# Altium schematic symbol library MicroController.SchLib: 67 symbols (part 1 of 4)
Pins are listed as number, name and electrical type; pins without a type are passive.

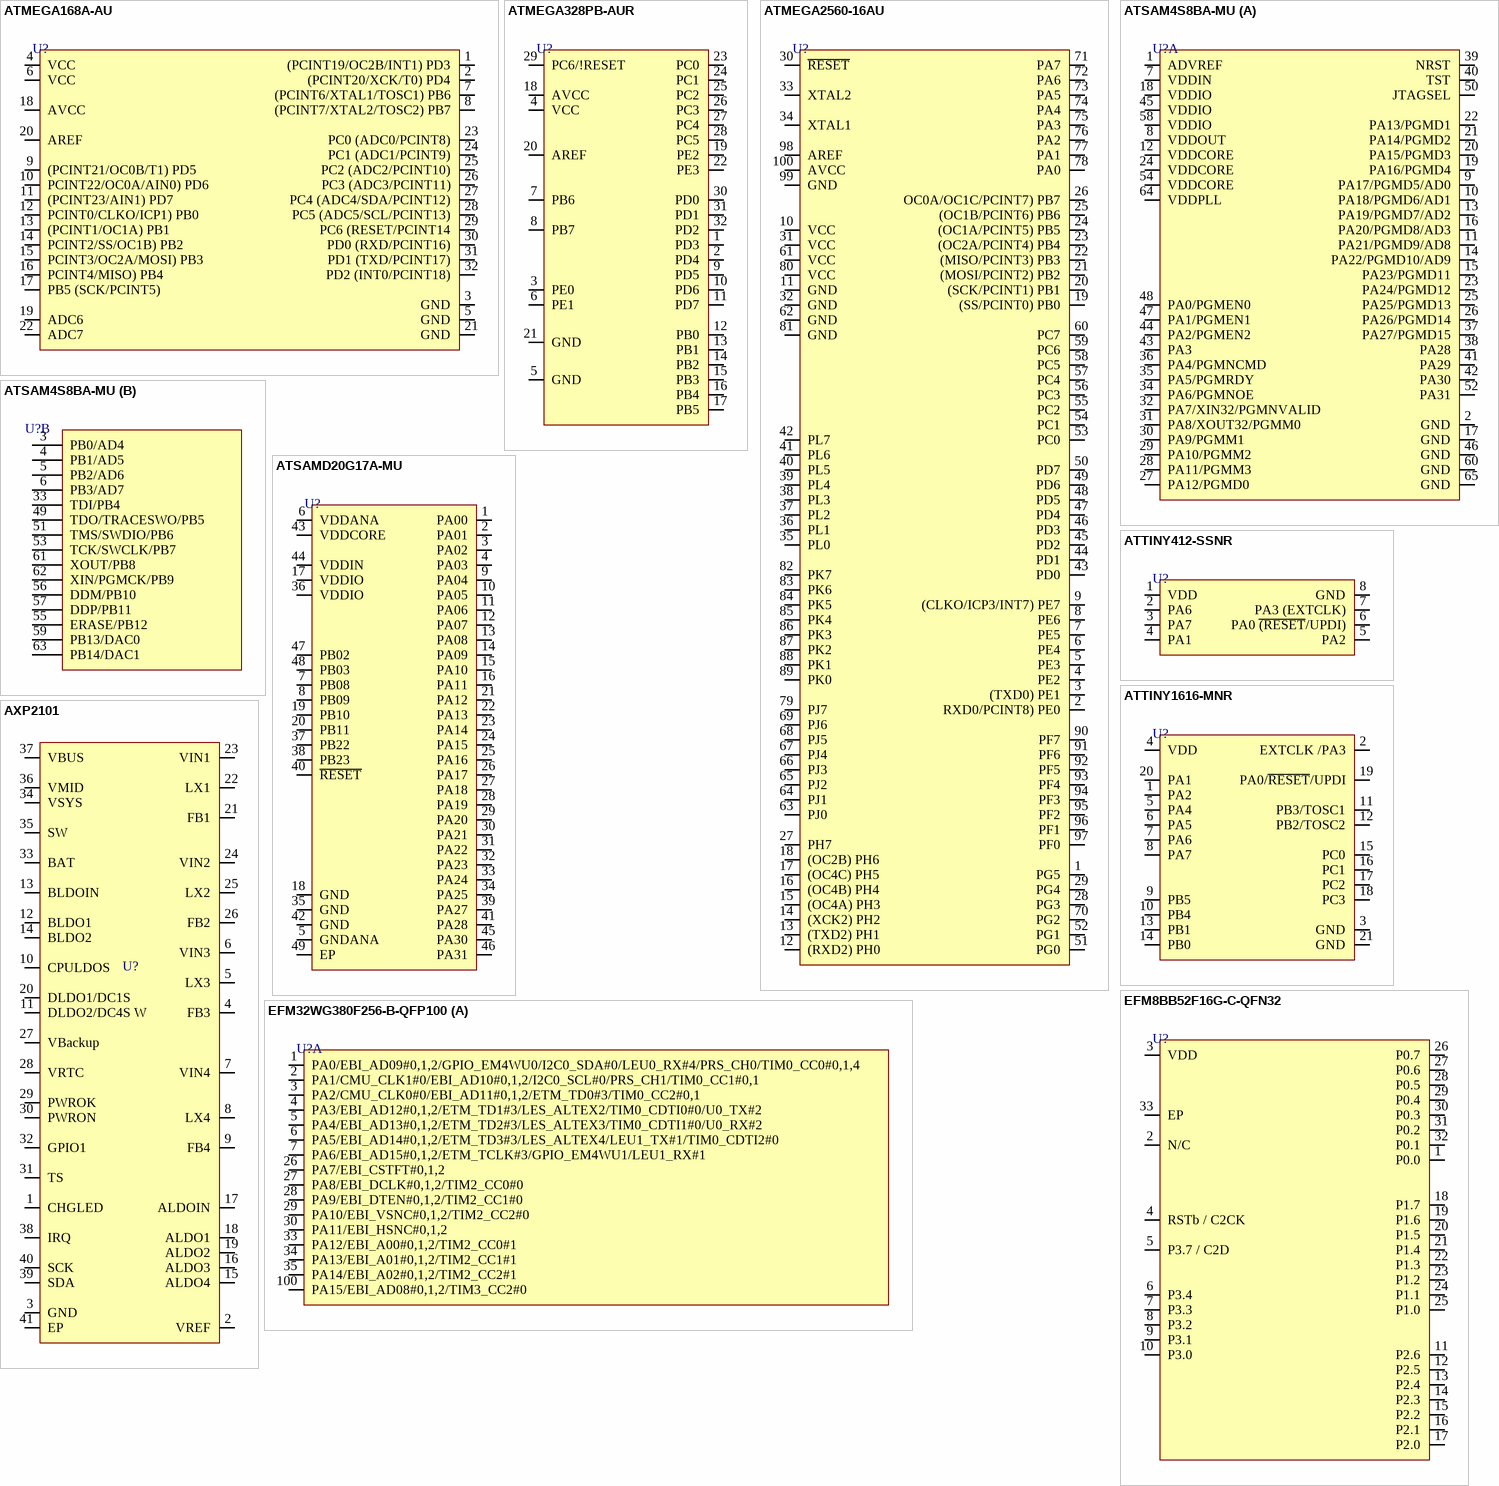
[diagram p0: symbols ATMEGA168A-AU to EFM32WG380F256-B-QFP100]

## ATMEGA168A-AU
designator U?
IC MCU 8BIT 16KB FLASH 32TQFP; Manufacturer: Microchip Tech; Manufacturer Part Number: ATMEGA168A-AU; Package: TQFP-32(7x7); LCSC Part Number: C1522091; Item Type: IC; ComponentLink1URL: https://www.lcsc.com/product-detail/Microcontroller-Units-MCUs-MPUs-SOCs_Microchip-Tech-ATMEGA168A-AU_C1522091.html; ComponentLink1Description: LCSC
footprint 32 TQFP (7x7)
pins: 1 (PCINT19/OC2B/INT1) PD3, 2 (PCINT20/XCK/T0) PD4, 3 GND, 4 VCC, 5 GND, 6 VCC, 7 (PCINT6/XTAL1/TOSC1) PB6, 8 (PCINT7/XTAL2/TOSC2) PB7, 9 (PCINT21/OC0B/T1) PD5, 10 PCINT22/OC0A/AIN0) PD6, 11 (PCINT23/AIN1) PD7, 12 PCINT0/CLKO/ICP1) PB0, 13 (PCINT1/OC1A) PB1, 14 PCINT2/SS/OC1B) PB2, 15 PCINT3/OC2A/MOSI) PB3, 16 PCINT4/MISO) PB4, 17 PB5 (SCK/PCINT5), 18 AVCC, 19 ADC6, 20 AREF, 21 GND, 22 ADC7, 23 PC0 (ADC0/PCINT8), 24 PC1 (ADC1/PCINT9), 25 PC2 (ADC2/PCINT10), 26 PC3 (ADC3/PCINT11), 27 PC4 (ADC4/SDA/PCINT12), 28 PC5 (ADC5/SCL/PCINT13), 29 PC6 (RESET/PCINT14, 30 PD0 (RXD/PCINT16), 31 PD1 (TXD/PCINT17), 32 PD2 (INT0/PCINT18)

## ATMEGA328PB-AUR
designator U?
IC MCU 8BIT 32KB FLASH 32TQFP; Manufacturer: Microchip; Manufacturer Part Number: ATMEGA328PB-AUR; Number of A/D Converters: 1NUMBER; Number of ADC Channels: 8NUMBER; Number of I2C Channels: 2NUMBER; Number of PWM Channels: 10NUMBER; Supplier: Digikey; Supplier Part Number: ATMEGA328PB-AURCT-ND; RoHS: No; Category: Microcontrollers; Stock: 17600; Pricing: 1=1.7, 25=1.56, 100=1.41 (USD); Number of SPI Channels: 2NUMBER; Number of UART Channels: 2NUMBER; Height: 1.2mm; ComponentLink1URL: http://www.atmel.com/images/atmel-42397-8-bit-avr-microcontroller-atmega328pb_summary.pdf?src-supplier=Avnet; ComponentLink1Description: http://www.atmel.com/images/atmel-42397-8-bit-avr-microcontroller-atmega328pb_summary.pdf?src-supplier=Avnet; ComponentLink2URL: http://www.microchip.com/mymicrochip/filehandler.aspx?ddocname=en589666&src-supplier=Digikey; ComponentLink2Description: http://www.microchip.com/mymicrochip/filehandler.aspx?ddocname=en589666&src-supplier=Digikey; ComponentLink3URL: https://datasheet.octopart.com/ATMEGA328PB-AUR-Microchip-datasheet-154741725.pdf?src-supplier=Electro+Sonic; ComponentLink3Description: https://datasheet.octopart.com/ATMEGA328PB-AUR-Microchip-datasheet-154741725.pdf?src-supplier=Electro+Sonic; ComponentLink4URL: https://datasheet.octopart.com/ATMEGA328PB-AUR-Microchip-datasheet-136376163.pdf?src-supplier=SHENGYU+ELECTRONICS; ComponentLink4Description: https://datasheet.octopart.com/ATMEGA328PB-AUR-Microchip-datasheet-136376163.pdf?src-supplier=SHENGYU+ELECTRONICS
footprint 32 TQFP (7x7)
pins: 1 PD3, 2 PD4, 3 PE0, 4 VCC, 5 GND, 6 PE1, 7 PB6, 8 PB7, 9 PD5, 10 PD6, 11 PD7, 12 PB0, 13 PB1, 14 PB2, 15 PB3, 16 PB4, 17 PB5, 18 AVCC, 19 PE2, 20 AREF, 21 GND, 22 PE3, 23 PC0, 24 PC1, 25 PC2, 26 PC3, 27 PC4, 28 PC5, 29 PC6/!RESET, 30 PD0, 31 PD1, 32 PD2

## ATMEGA2560-16AU
designator U?
IC MCU 8BIT 256KB FLASH 100TQFP; Manufacturer: Microchip; Manufacturer Part Number: ATMEGA2560-16AU; Number of Terminals/Pins: 100; Package Body Material: Plastic; Core Architecture: AVR; Frequency: 16MHz; Interface: I2C,SPI,UART,USART,EBI/EMI,2-Wire; Number of I/Os: 86; Oscillator Type: Internal; Data Bus Width: 8b; Peripherals: PWM,Brown-out Detect/Reset,POR,WDT; Min Supply Voltage: 4.5V; Max Supply Voltage: 5.5V; Number of PWM Channels: 12; Operating Supply Voltage: 5V; RAM Size: 8KB; Number of Timers/Counters: 6; Number of ADC Channels: 16; Number of SPI Channels: 1; Watchdog Timer: Yes; Access Time: 16us; Time @ Peak Reflow Temperature-Max (s): 40s; Supplier 1: Avnet; RoHS: Yes; Category: Uncategorized; Stock 1: 4; Pricing 1: 1=12.70000 (USD); Mount: Surface Mount; Case/Package: A; Number of Pins: 100; Package Code: TFQFP; Package Shape: Square; Terminal Finish: Tin; Min Operating Temperature: -40°C; Max Operating Temperature: 85°C; Series: AVR® ATmega; Package Quantity: 90; Packaging: Tray; Memory Size: 256KB; Memory Type: FLASH; Density: 256KB; Number of Programmable I/O: 86; Max Frequency: 16MHz; Number of I2C Channels: 1; Termination: SMD/SMT; Terminal Form: Gull Wing; JESD-30 Code: S-PQFP-G100; Surface Mount: Yes; Terminal Position: QUAD; Number of I/O Lines: 86; Moisture Sensitivity Level: 3; Technology: CMOS; Peak Reflow Temperature (Cel): 260°C; Length: 14.1mm; Width: 14.1mm; Height: 1.05mm; Radiation Hardening: No; Reach SVHC Compliant: Yes; Lead Free: Lead Free; RoHS Compliant: Yes; Temperature Grade: INDUSTRIAL; ComponentLink1URL: https://datasheet.ciiva.com/22651/1698622-22651116.pdf?src-supplier=Farnell; ComponentLink1Description: https://datasheet.ciiva.com/22651/1698622-22651116.pdf?src-supplier=Farnell; ComponentLink2URL: https://datasheet.ciiva.com/15122/getdatasheetpartid-134542-15122545.pdf?src-supplier=Verical; ComponentLink2Description: https://datasheet.ciiva.com/15122/getdatasheetpartid-134542-15122545.pdf?src-supplier=Verical; ComponentLink3URL: https://datasheet.ciiva.com/29119/154804-da-01-en-atmega2560-16au-tqfp-100-29119580.pdf?src-supplier=Conrad; ComponentLink3Description: https://datasheet.ciiva.com/29119/154804-da-01-en-atmega2560-16au-tqfp-100-29119580.pdf?src-supplier=Conrad; ComponentLink4URL: https://datasheet.ciiva.com/6640/atmel-2549-8-bit-avr-microcontroller-atmega640-1280-1281-2560-2561-summary-6640293.pdf?src-supplier=Digi-Key; ComponentLink4Description: https://datasheet.ciiva.com/6640/atmel-2549-8-bit-avr-microcontroller-atmega640-1280-1281-2560-2561-summary-6640293.pdf?src-supplier=Digi-Key; ComponentLink5URL: https://datasheet.ciiva.com/1162/33246-1162139.pdf?src-supplier=Farnell; ComponentLink5Description: https://datasheet.ciiva.com/1162/33246-1162139.pdf?src-supplier=Farnell; ComponentLink6URL: https://datasheet.ciiva.com/1157/1817551-1157521.pdf?src-supplier=Element14; ComponentLink6Description: https://datasheet.ciiva.com/1157/1817551-1157521.pdf?src-supplier=Element14; ComponentLink7URL: https://datasheet.ciiva.com/16936/70123980-16936268.pdf?src-supplier=Allied+Electronics; ComponentLink7Description: https://datasheet.ciiva.com/16936/70123980-16936268.pdf?src-supplier=Allied+Electronics; Supplier Part Number 1: 68T2776; LCSC Part Number: C22460; Item Type: IC
footprint TQFP-100(14x14)
pins: 1 PG5, 2 RXD0/PCINT8) PE0, 3 (TXD0) PE1, 4 PE2, 5 PE3, 6 PE4, 7 PE5, 8 PE6, 9 (CLKO/ICP3/INT7) PE7, 10 VCC, 11 GND, 12 (RXD2) PH0, 13 (TXD2) PH1, 14 (XCK2) PH2, 15 (OC4A) PH3, 16 (OC4B) PH4, 17 (OC4C) PH5, 18 (OC2B) PH6, 19 (SS/PCINT0) PB0, 20 (SCK/PCINT1) PB1, 21 (MOSI/PCINT2) PB2, 22 (MISO/PCINT3) PB3, 23 (OC2A/PCINT4) PB4, 24 (OC1A/PCINT5) PB5, 25 (OC1B/PCINT6) PB6, 26 OC0A/OC1C/PCINT7) PB7, 27 PH7, 28 PG3, 29 PG4, 30 ~{RESET}, 31 VCC, 32 GND, 33 XTAL2, 34 XTAL1, 35 PL0, 36 PL1, 37 PL2, 38 PL3, 39 PL4, 40 PL5, 41 PL6, 42 PL7, 43 PD0, 44 PD1, 45 PD2, 46 PD3, 47 PD4, 48 PD5, 49 PD6, 50 PD7, 51 PG0, 52 PG1, 53 PC0, 54 PC1, 55 PC2, 56 PC3, 57 PC4, 58 PC5, 59 PC6, 60 PC7, 61 VCC, 62 GND, 63 PJ0, 64 PJ1, 65 PJ2, 66 PJ3, 67 PJ4, 68 PJ5, 69 PJ6, 70 PG2, 71 PA7, 72 PA6, 73 PA5, 74 PA4, 75 PA3, 76 PA2, 77 PA1, 78 PA0, 79 PJ7, 80 VCC, 81 GND, 82 PK7, 83 PK6, 84 PK5, 85 PK4, 86 PK3, 87 PK2, 88 PK1, 89 PK0, 90 PF7, 91 PF6, 92 PF5, 93 PF4, 94 PF3, 95 PF2, 96 PF1, 97 PF0, 98 AREF, 99 GND, 100 AVCC

## ATSAM4S8BA-MU
designator U?
IC MCU 32BIT 512KB FLASH 64QFN; Manufacturer: Microchip; Manufacturer Part Number: ATSAM4S8BA-MU; Interface: I2C,SPI,USB,IrDA,UART,USART; Peripherals: Brown-out Detect/Reset,POR,PWM,WDT,DMA; Core Architecture: ARM; Frequency: 120MHz; Oscillator Type: Internal; Number of I/Os: 47; Supplier 1: Digi-Key; RoHS: Yes; Category: Microcontrollers; Pricing 1: 1=6.23000, 25=5.66960, 100=5.13000 (USD); Case/Package: QFN; Min Operating Temperature: -40°C; Max Operating Temperature: 85°C; Memory Type: FLASH; Packaging: Tray; Memory Size: 512KB; RoHS Compliant: Yes; ComponentLink1URL: http://www.microchip.com/mymicrochip/filehandler.aspx?ddocname=en590343&src-supplier=Digi-Key; ComponentLink1Description: http://www.microchip.com/mymicrochip/filehandler.aspx?ddocname=en590343&src-supplier=Digi-Key; Supplier Part Number 1: ATSAM4S8BA-MU-ND; LCSC Part Number: C1337875; Item Type: IC
footprint QFN-64-EP(9x9)
part A pins: 1 ADVREF, 2 GND, 7 VDDIN, 8 VDDOUT, 9 PA17/PGMD5/AD0, 10 PA18/PGMD6/AD1, 11 PA21/PGMD9/AD8, 12 VDDCORE, 13 PA19/PGMD7/AD2, 14 PA22/PGMD10/AD9, 15 PA23/PGMD11, 16 PA20/PGMD8/AD3, 17 GND, 18 VDDIO, 19 PA16/PGMD4, 20 PA15/PGMD3, 21 PA14/PGMD2, 22 PA13/PGMD1, 23 PA24/PGMD12, 24 VDDCORE, 25 PA25/PGMD13, 26 PA26/PGMD14, 27 PA12/PGMD0, 28 PA11/PGMM3, 29 PA10/PGMM2, 30 PA9/PGMM1, 31 PA8/XOUT32/PGMM0, 32 PA7/XIN32/PGMNVALID, 34 PA6/PGMNOE, 35 PA5/PGMRDY, 36 PA4/PGMNCMD, 37 PA27/PGMD15, 38 PA28, 39 NRST, 40 TST, 41 PA29, 42 PA30, 43 PA3, 44 PA2/PGMEN2, 45 VDDIO, 46 GND, 47 PA1/PGMEN1, 48 PA0/PGMEN0, 50 JTAGSEL, 52 PA31, 54 VDDCORE, 58 VDDIO, 60 GND, 64 VDDPLL, 65 GND
part B pins: 3 PB0/AD4, 4 PB1/AD5, 5 PB2/AD6, 6 PB3/AD7, 33 TDI/PB4, 49 TDO/TRACESWO/PB5, 51 TMS/SWDIO/PB6, 53 TCK/SWCLK/PB7, 55 ERASE/PB12, 56 DDM/PB10, 57 DDP/PB11, 59 PB13/DAC0, 61 XOUT/PB8, 62 XIN/PGMCK/PB9, 63 PB14/DAC1

## ATSAMD20G17A-MU
designator U?
IC MCU 32BIT 128KB FLASH 48QFN; Manufacturer: Microchip; Manufacturer Part Number: ATSAMD20G17A-MU; Supplier: Arrow Electronics; LCSC Part Number: C1343519; RoHS: Yes; Item Type: IC; Pricing: 416=2.217 (USD); ComponentLink1URL: https://datasheet.ciiva.com/29989/atmel-42129-sam-d20-datasheet-29989946.pdf?src-supplier=Avnet; ComponentLink1Description: https://datasheet.ciiva.com/29989/atmel-42129-sam-d20-datasheet-29989946.pdf?src-supplier=Avnet
footprint 48-QFN (7x7)
pins: 1 PA00 "Parallel I/O Controller I/O Port A", 2 PA01 "Parallel I/O Controller I/O Port A", 3 PA02 "Parallel I/O Controller I/O Port A", 4 PA03 "Parallel I/O Controller I/O Port A", 5 GNDANA, 6 VDDANA, 7 PB08 "Parallel I/O Controller I/O Port B", 8 PB09 "Parallel I/O Controller I/O Port B", 9 PA04 "Parallel I/O Controller I/O Port A", 10 PA05 "Parallel I/O Controller I/O Port A", 11 PA06 "Parallel I/O Controller I/O Port A", 12 PA07 "Parallel I/O Controller I/O Port A", 13 PA08 "Parallel I/O Controller I/O Port A", 14 PA09 "Parallel I/O Controller I/O Port A", 15 PA10 "Parallel I/O Controller I/O Port A", 16 PA11 "Parallel I/O Controller I/O Port A", 17 VDDIO, 18 GND, 19 PB10 "Parallel I/O Controller I/O Port B", 20 PB11 "Parallel I/O Controller I/O Port B", 21 PA12 "Parallel I/O Controller I/O Port A", 22 PA13 "Parallel I/O Controller I/O Port A", 23 PA14 "Parallel I/O Controller I/O Port A", 24 PA15 "Parallel I/O Controller I/O Port A", 25 PA16 "Parallel I/O Controller I/O Port A", 26 PA17 "Parallel I/O Controller I/O Port A", 27 PA18 "Parallel I/O Controller I/O Port A", 28 PA19 "Parallel I/O Controller I/O Port A", 29 PA20 "Parallel I/O Controller I/O Port A", 30 PA21 "Parallel I/O Controller I/O Port A", 31 PA22 "Parallel I/O Controller I/O Port A", 32 PA23 "Parallel I/O Controller I/O Port A", 33 PA24 "Parallel I/O Controller I/O Port A", 34 PA25 "Parallel I/O Controller I/O Port A", 35 GND, 36 VDDIO, 37 PB22 "Parallel I/O Controller I/O Port B", 38 PB23 "Parallel I/O Controller I/O Port B", 39 PA27 "Parallel I/O Controller I/O Port A", 40 ~{RESET} "Reset", 41 PA28 "Parallel I/O Controller I/O Port A", 42 GND, 43 VDDCORE, 44 VDDIN, 45 PA30 "Parallel I/O Controller I/O Port A", 46 PA31 "Parallel I/O Controller I/O Port A", 47 PB02 "Parallel I/O Controller I/O Port B", 48 PB03 "Parallel I/O Controller I/O Port B", 49 EP

## ATTINY412-SSNR
designator U?
IC MCU 8BIT 4KB FLASH 8SOIC; Manufacturer: Microchip; Manufacturer Part Number: ATTINY412-SSNR; Supplier: Digikey; Supplier Part Number: ATTINY412-SSNRCT-ND; RoHS: Yes; Category: Microcontrollers; Stock: 11598; Pricing: 1=0.58, 25=0.53, 100=0.47 (USD); ComponentLink1URL: http://www.farnell.com/datasheets/2785624.pdf?src-supplier=Farnell; ComponentLink1Description: http://www.farnell.com/datasheets/2785624.pdf?src-supplier=Farnell; ComponentLink2URL: http://www.microchip.com/mymicrochip/filehandler.aspx?ddocname=en599382&src-supplier=Digikey; ComponentLink2Description: http://www.microchip.com/mymicrochip/filehandler.aspx?ddocname=en599382&src-supplier=Digikey; ComponentLink3URL: http://www.microchip.com/mymicrochip/filehandler.aspx?ddocname=en599385&src-supplier=Digikey; ComponentLink3Description: http://www.microchip.com/mymicrochip/filehandler.aspx?ddocname=en599385&src-supplier=Digikey; ComponentLink4URL: https://datasheet.octopart.com/ATTINY412-SSNR-Microchip-datasheet-164410963.pdf?src-supplier=SHENGYU+ELECTRONICS; ComponentLink4Description: https://datasheet.octopart.com/ATTINY412-SSNR-Microchip-datasheet-164410963.pdf?src-supplier=SHENGYU+ELECTRONICS; ComponentLink5URL: https://datasheet.octopart.com/ATTINY412-SSNR-Microchip-datasheet-137472780.pdf?src-supplier=Master+Electronics; ComponentLink5Description: https://datasheet.octopart.com/ATTINY412-SSNR-Microchip-datasheet-137472780.pdf?src-supplier=Master+Electronics
footprint SOIC-8(0.154", 3.90mm Width)
pins: 1 VDD, 2 PA6, 3 PA7, 4 PA1, 5 PA2, 6 PA0 ~{(RESET}/UPDI), 7 PA3 (EXTCLK), 8 GND

## ATTINY1616-MNR
designator U?
IC MCU 8BIT 16KB FLASH 20VQFN; Manufacturer: Microchip Tech; Manufacturer Part Number: ATTINY1616-MNR; Package: QFN-20-EP(3x3); LCSC Part Number: C507118; Item Type: IC; ComponentLink1URL: https://www.lcsc.com/product-detail/Microcontroller-Units-MCUs-MPUs-SOCs_Microchip-Tech-ATTINY1616-MNR_C507118.html; ComponentLink1Description: LCSC
footprint 20-VQFN (3x3)
pins: 1 PA2, 2 EXTCLK /PA3, 3 GND, 4 VDD, 5 PA4, 6 PA5, 7 PA6, 8 PA7, 9 PB5, 10 PB4, 11 PB3/TOSC1, 12 PB2/TOSC2, 13 PB1, 14 PB0, 15 PC0, 16 PC1, 17 PC2, 18 PC3, 19 PA0/~{RESET}/UPDI, 20 PA1, 21 GND

## AXP2101
designator U?
QFN-40-EP(5x5) Microcontroller Units (MCUs/MPUs/SOCs) ROHS; Manufacturer: X-Powers Tech; Manufacturer Part Number: AXP2101; Item Type: IC; Package: QFN-40-EP(5x5); JLCPCB Part Number: C3036461
footprint 40-QFN (5mm×5mm)
pins: 1 CHGLED, 2 VREF, 3 GND, 4 FB3, 5 LX3, 6 VIN3, 7 VIN4, 8 LX4, 9 FB4, 10 CPULDOS, 11 DLDO2/DC4S W, 12 BLDO1, 13 BLDOIN, 14 BLDO2, 15 ALDO4, 16 ALDO3, 17 ALDOIN, 18 ALDO1, 19 ALDO2, 20 DLDO1/DC1S, 21 FB1, 22 LX1, 23 VIN1, 24 VIN2, 25 LX2, 26 FB2, 27 VBackup, 28 VRTC, 29 PWROK, 30 PWRON, 31 TS, 32 GPIO1, 33 BAT, 34 VSYS, 35 SW, 36 VMID, 37 VBUS, 38 IRQ, 39 SDA, 40 SCK, 41 EP

## EFM8BB52F16G-C-QFN32
designator U?
IC MCU 8BIT 16KB FLASH 32QFN; Manufacturer: Silicon Labs; Manufacturer Part Number: EFM8BB52F16G-C-QFN32; Supplier: Arrow Electronics; Supplier Part Number: EFM8BB52F16G-C-QFN32; RoHS: No; Category: Uncategorized; Stock: 540; Pricing: 1=0.5847, 10=0.5643, 100=0.5088, 600=0.5037, 1000=0.48 (USD); Item Type: IC
footprint 32-QFN (5x5) (32pins, 5x5mm body, 0.5mm pitch QFN package)
pins: 1 P0.0, 2 N/C, 3 VDD, 4 RSTb / C2CK, 5 P3.7 / C2D, 6 P3.4, 7 P3.3, 8 P3.2, 9 P3.1, 10 P3.0, 11 P2.6, 12 P2.5, 13 P2.4, 14 P2.3, 15 P2.2, 16 P2.1, 17 P2.0, 18 P1.7, 19 P1.6, 20 P1.5, 21 P1.4, 22 P1.3, 23 P1.2, 24 P1.1, 25 P1.0, 26 P0.7, 27 P0.6, 28 P0.5, 29 P0.4, 30 P0.3, 31 P0.2, 32 P0.1, 33 EP

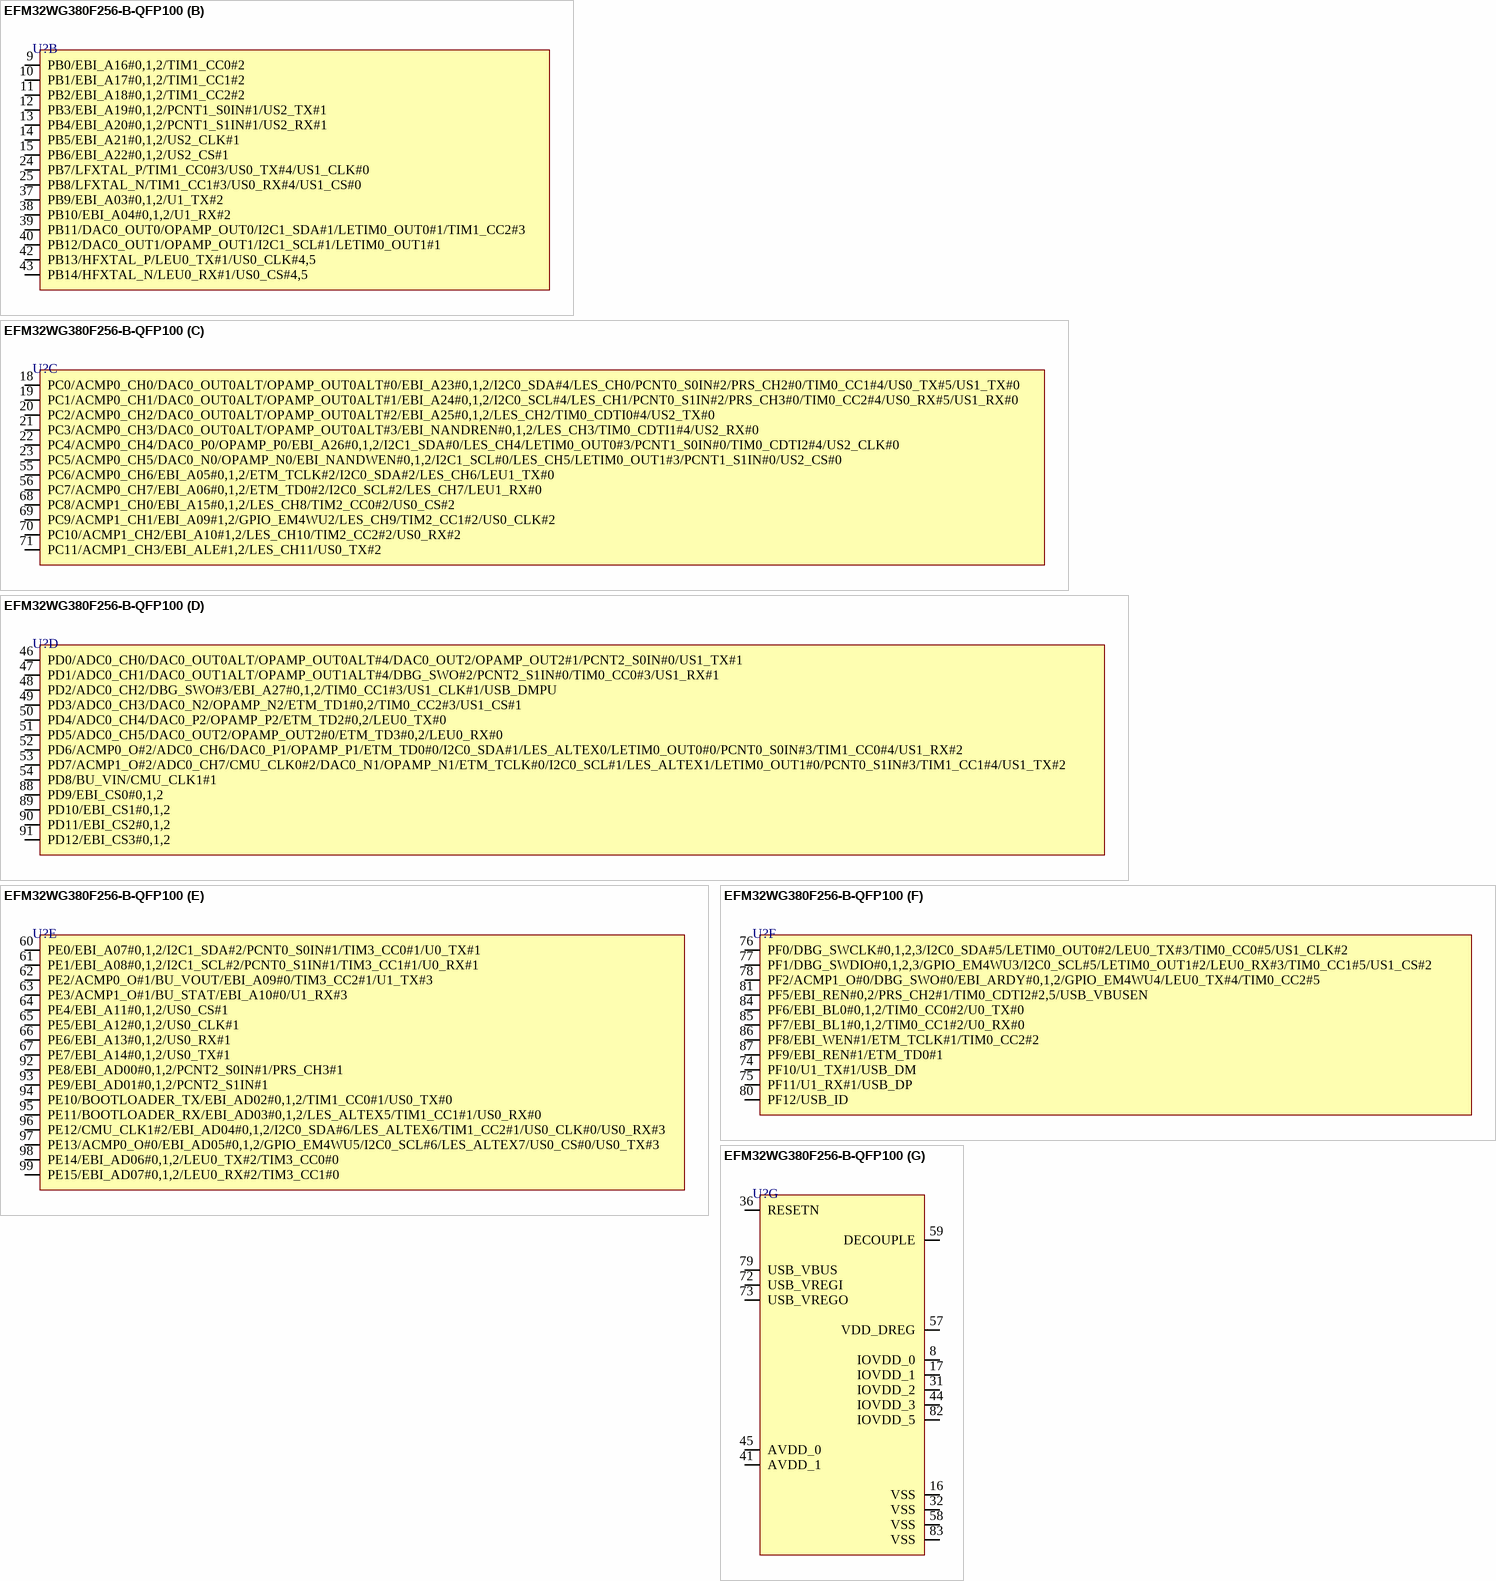
[diagram p1: symbol EFM32WG380F256-B-QFP100]

## EFM32WG380F256-B-QFP100
designator U?
IC MCU 32BIT 256KB FLASH 100LQFP; Manufacturer: Silicon Labs; Manufacturer Part Number: EFM32WG380F256-B-QFP100; Supplier: Mouser; LCSC Part Number: C3210153; Item Type: IC; Stock: 2000; Pricing: 1=13.12, 10=12.06, 50=11.56, 100=10.18, 1000=8.31, 10000=8.31 (USD)
footprint EFM32WG380F256-B-QFP100R
part A pins: 1 PA0/EBI_AD09#0,1,2/GPIO_EM4WU0/I2C0_SDA#0/LEU0_RX#4/PRS_CH0/TIM0_CC0#0,1,4, 2 PA1/CMU_CLK1#0/EBI_AD10#0,1,2/I2C0_SCL#0/PRS_CH1/TIM0_CC1#0,1, 3 PA2/CMU_CLK0#0/EBI_AD11#0,1,2/ETM_TD0#3/TIM0_CC2#0,1, 4 PA3/EBI_AD12#0,1,2/ETM_TD1#3/LES_ALTEX2/TIM0_CDTI0#0/U0_TX#2, 5 PA4/EBI_AD13#0,1,2/ETM_TD2#3/LES_ALTEX3/TIM0_CDTI1#0/U0_RX#2, 6 PA5/EBI_AD14#0,1,2/ETM_TD3#3/LES_ALTEX4/LEU1_TX#1/TIM0_CDTI2#0, 7 PA6/EBI_AD15#0,1,2/ETM_TCLK#3/GPIO_EM4WU1/LEU1_RX#1, 26 PA7/EBI_CSTFT#0,1,2, 27 PA8/EBI_DCLK#0,1,2/TIM2_CC0#0, 28 PA9/EBI_DTEN#0,1,2/TIM2_CC1#0, 29 PA10/EBI_VSNC#0,1,2/TIM2_CC2#0, 30 PA11/EBI_HSNC#0,1,2, 33 PA12/EBI_A00#0,1,2/TIM2_CC0#1, 34 PA13/EBI_A01#0,1,2/TIM2_CC1#1, 35 PA14/EBI_A02#0,1,2/TIM2_CC2#1, 100 PA15/EBI_AD08#0,1,2/TIM3_CC2#0
part B pins: 9 PB0/EBI_A16#0,1,2/TIM1_CC0#2, 10 PB1/EBI_A17#0,1,2/TIM1_CC1#2, 11 PB2/EBI_A18#0,1,2/TIM1_CC2#2, 12 PB3/EBI_A19#0,1,2/PCNT1_S0IN#1/US2_TX#1, 13 PB4/EBI_A20#0,1,2/PCNT1_S1IN#1/US2_RX#1, 14 PB5/EBI_A21#0,1,2/US2_CLK#1, 15 PB6/EBI_A22#0,1,2/US2_CS#1, 24 PB7/LFXTAL_P/TIM1_CC0#3/US0_TX#4/US1_CLK#0, 25 PB8/LFXTAL_N/TIM1_CC1#3/US0_RX#4/US1_CS#0, 37 PB9/EBI_A03#0,1,2/U1_TX#2, 38 PB10/EBI_A04#0,1,2/U1_RX#2, 39 PB11/DAC0_OUT0/OPAMP_OUT0/I2C1_SDA#1/LETIM0_OUT0#1/TIM1_CC2#3, 40 PB12/DAC0_OUT1/OPAMP_OUT1/I2C1_SCL#1/LETIM0_OUT1#1, 42 PB13/HFXTAL_P/LEU0_TX#1/US0_CLK#4,5, 43 PB14/HFXTAL_N/LEU0_RX#1/US0_CS#4,5
part C pins: 18 PC0/ACMP0_CH0/DAC0_OUT0ALT/OPAMP_OUT0ALT#0/EBI_A23#0,1,2/I2C0_SDA#4/LES_CH0/PCNT0_S0IN#2/PRS_CH2#0/TIM0_CC1#4/US0_TX#5/US1_TX#0, 19 PC1/ACMP0_CH1/DAC0_OUT0ALT/OPAMP_OUT0ALT#1/EBI_A24#0,1,2/I2C0_SCL#4/LES_CH1/PCNT0_S1IN#2/PRS_CH3#0/TIM0_CC2#4/US0_RX#5/US1_RX#0, 20 PC2/ACMP0_CH2/DAC0_OUT0ALT/OPAMP_OUT0ALT#2/EBI_A25#0,1,2/LES_CH2/TIM0_CDTI0#4/US2_TX#0, 21 PC3/ACMP0_CH3/DAC0_OUT0ALT/OPAMP_OUT0ALT#3/EBI_NANDREN#0,1,2/LES_CH3/TIM0_CDTI1#4/US2_RX#0, 22 PC4/ACMP0_CH4/DAC0_P0/OPAMP_P0/EBI_A26#0,1,2/I2C1_SDA#0/LES_CH4/LETIM0_OUT0#3/PCNT1_S0IN#0/TIM0_CDTI2#4/US2_CLK#0, 23 PC5/ACMP0_CH5/DAC0_N0/OPAMP_N0/EBI_NANDWEN#0,1,2/I2C1_SCL#0/LES_CH5/LETIM0_OUT1#3/PCNT1_S1IN#0/US2_CS#0, 55 PC6/ACMP0_CH6/EBI_A05#0,1,2/ETM_TCLK#2/I2C0_SDA#2/LES_CH6/LEU1_TX#0, 56 PC7/ACMP0_CH7/EBI_A06#0,1,2/ETM_TD0#2/I2C0_SCL#2/LES_CH7/LEU1_RX#0, 68 PC8/ACMP1_CH0/EBI_A15#0,1,2/LES_CH8/TIM2_CC0#2/US0_CS#2, 69 PC9/ACMP1_CH1/EBI_A09#1,2/GPIO_EM4WU2/LES_CH9/TIM2_CC1#2/US0_CLK#2, 70 PC10/ACMP1_CH2/EBI_A10#1,2/LES_CH10/TIM2_CC2#2/US0_RX#2, 71 PC11/ACMP1_CH3/EBI_ALE#1,2/LES_CH11/US0_TX#2
part D pins: 46 PD0/ADC0_CH0/DAC0_OUT0ALT/OPAMP_OUT0ALT#4/DAC0_OUT2/OPAMP_OUT2#1/PCNT2_S0IN#0/US1_TX#1, 47 PD1/ADC0_CH1/DAC0_OUT1ALT/OPAMP_OUT1ALT#4/DBG_SWO#2/PCNT2_S1IN#0/TIM0_CC0#3/US1_RX#1, 48 PD2/ADC0_CH2/DBG_SWO#3/EBI_A27#0,1,2/TIM0_CC1#3/US1_CLK#1/USB_DMPU, 49 PD3/ADC0_CH3/DAC0_N2/OPAMP_N2/ETM_TD1#0,2/TIM0_CC2#3/US1_CS#1, 50 PD4/ADC0_CH4/DAC0_P2/OPAMP_P2/ETM_TD2#0,2/LEU0_TX#0, 51 PD5/ADC0_CH5/DAC0_OUT2/OPAMP_OUT2#0/ETM_TD3#0,2/LEU0_RX#0, 52 PD6/ACMP0_O#2/ADC0_CH6/DAC0_P1/OPAMP_P1/ETM_TD0#0/I2C0_SDA#1/LES_ALTEX0/LETIM0_OUT0#0/PCNT0_S0IN#3/TIM1_CC0#4/US1_RX#2, 53 PD7/ACMP1_O#2/ADC0_CH7/CMU_CLK0#2/DAC0_N1/OPAMP_N1/ETM_TCLK#0/I2C0_SCL#1/LES_ALTEX1/LETIM0_OUT1#0/PCNT0_S1IN#3/TIM1_CC1#4/US1_TX#2, 54 PD8/BU_VIN/CMU_CLK1#1, 88 PD9/EBI_CS0#0,1,2, 89 PD10/EBI_CS1#0,1,2, 90 PD11/EBI_CS2#0,1,2, 91 PD12/EBI_CS3#0,1,2
part E pins: 60 PE0/EBI_A07#0,1,2/I2C1_SDA#2/PCNT0_S0IN#1/TIM3_CC0#1/U0_TX#1, 61 PE1/EBI_A08#0,1,2/I2C1_SCL#2/PCNT0_S1IN#1/TIM3_CC1#1/U0_RX#1, 62 PE2/ACMP0_O#1/BU_VOUT/EBI_A09#0/TIM3_CC2#1/U1_TX#3, 63 PE3/ACMP1_O#1/BU_STAT/EBI_A10#0/U1_RX#3, 64 PE4/EBI_A11#0,1,2/US0_CS#1, 65 PE5/EBI_A12#0,1,2/US0_CLK#1, 66 PE6/EBI_A13#0,1,2/US0_RX#1, 67 PE7/EBI_A14#0,1,2/US0_TX#1, 92 PE8/EBI_AD00#0,1,2/PCNT2_S0IN#1/PRS_CH3#1, 93 PE9/EBI_AD01#0,1,2/PCNT2_S1IN#1, 94 PE10/BOOTLOADER_TX/EBI_AD02#0,1,2/TIM1_CC0#1/US0_TX#0, 95 PE11/BOOTLOADER_RX/EBI_AD03#0,1,2/LES_ALTEX5/TIM1_CC1#1/US0_RX#0, 96 PE12/CMU_CLK1#2/EBI_AD04#0,1,2/I2C0_SDA#6/LES_ALTEX6/TIM1_CC2#1/US0_CLK#0/US0_RX#3, 97 PE13/ACMP0_O#0/EBI_AD05#0,1,2/GPIO_EM4WU5/I2C0_SCL#6/LES_ALTEX7/US0_CS#0/US0_TX#3, 98 PE14/EBI_AD06#0,1,2/LEU0_TX#2/TIM3_CC0#0, 99 PE15/EBI_AD07#0,1,2/LEU0_RX#2/TIM3_CC1#0
part F pins: 74 PF10/U1_TX#1/USB_DM, 75 PF11/U1_RX#1/USB_DP, 76 PF0/DBG_SWCLK#0,1,2,3/I2C0_SDA#5/LETIM0_OUT0#2/LEU0_TX#3/TIM0_CC0#5/US1_CLK#2, 77 PF1/DBG_SWDIO#0,1,2,3/GPIO_EM4WU3/I2C0_SCL#5/LETIM0_OUT1#2/LEU0_RX#3/TIM0_CC1#5/US1_CS#2, 78 PF2/ACMP1_O#0/DBG_SWO#0/EBI_ARDY#0,1,2/GPIO_EM4WU4/LEU0_TX#4/TIM0_CC2#5, 80 PF12/USB_ID, 81 PF5/EBI_REN#0,2/PRS_CH2#1/TIM0_CDTI2#2,5/USB_VBUSEN, 84 PF6/EBI_BL0#0,1,2/TIM0_CC0#2/U0_TX#0, 85 PF7/EBI_BL1#0,1,2/TIM0_CC1#2/U0_RX#0, 86 PF8/EBI_WEN#1/ETM_TCLK#1/TIM0_CC2#2, 87 PF9/EBI_REN#1/ETM_TD0#1
part G pins: 8 IOVDD_0, 16 VSS, 17 IOVDD_1, 31 IOVDD_2, 32 VSS, 36 RESETN, 41 AVDD_1, 44 IOVDD_3, 45 AVDD_0, 57 VDD_DREG, 58 VSS, 59 DECOUPLE, 72 USB_VREGI, 73 USB_VREGO, 79 USB_VBUS, 82 IOVDD_5, 83 VSS

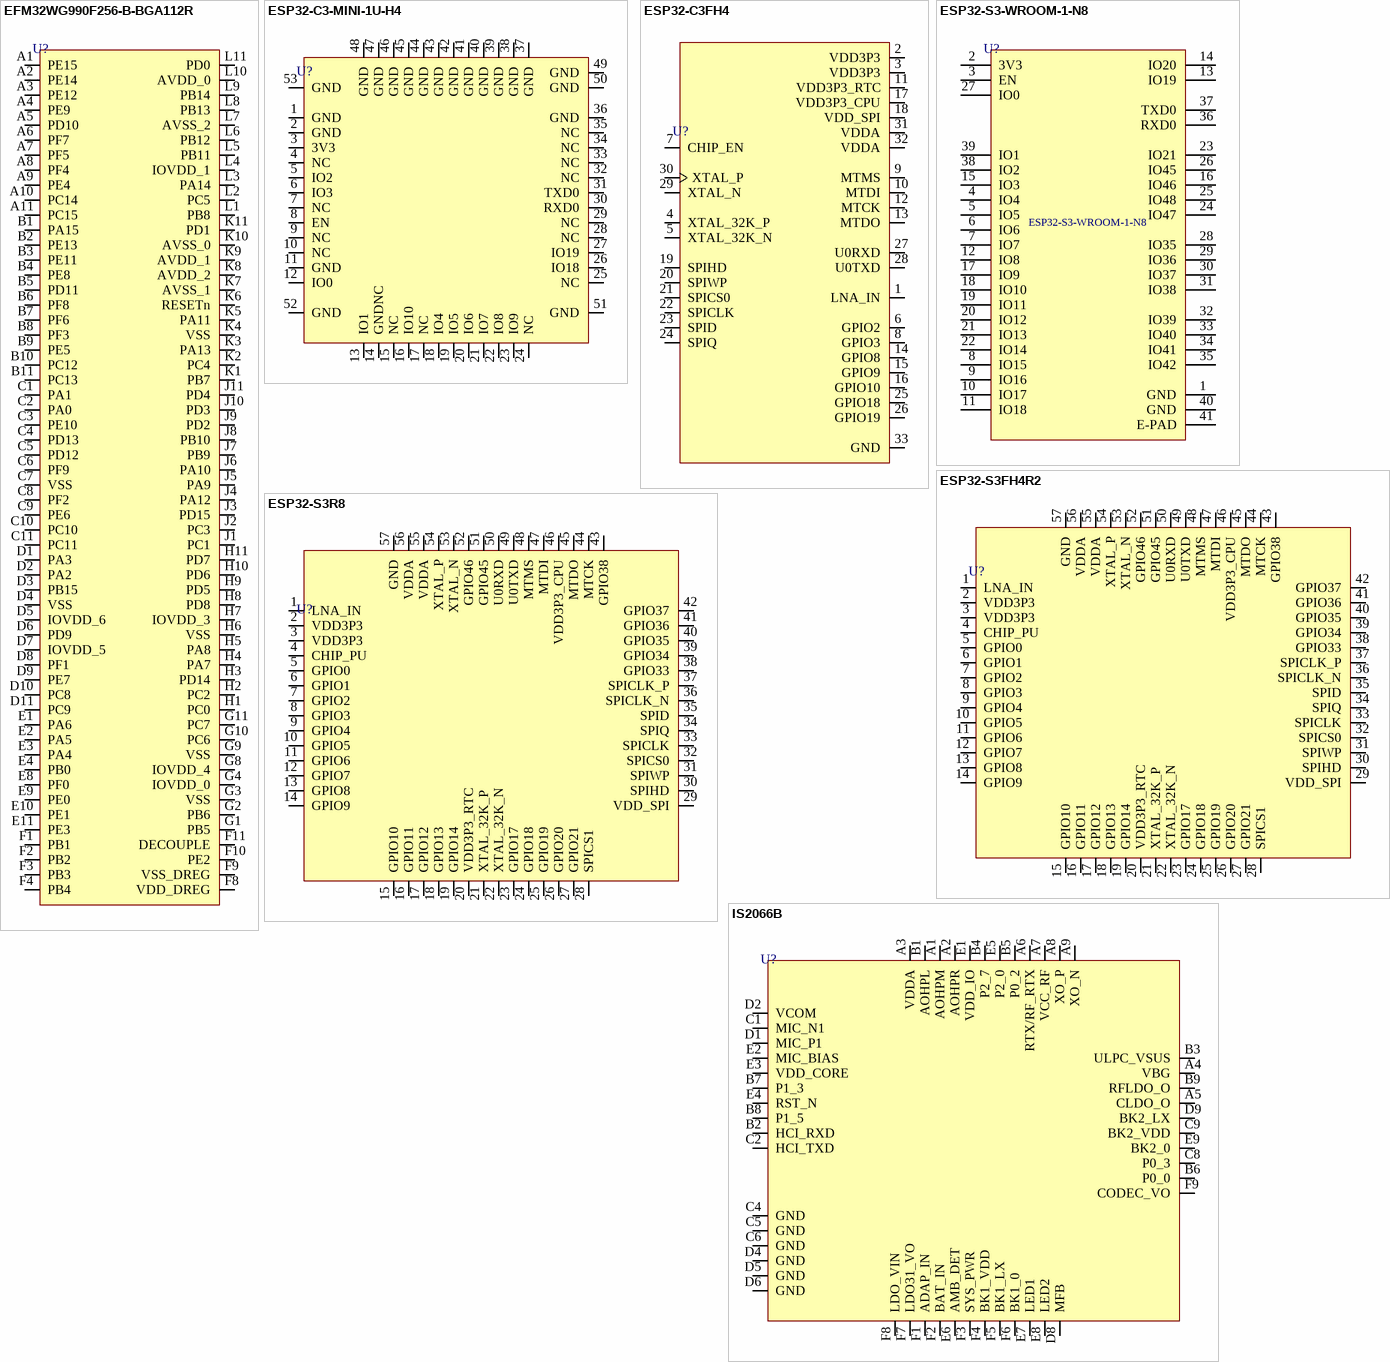
[diagram p2: symbols EFM32WG990F256-B-BGA112R to IS2066B]

## EFM32WG990F256-B-BGA112R
designator U?
IC MCU 32BIT 256KB FLASH 112BGA; Manufacturer: Silicon Labs; Manufacturer Part Number: EFM32WG990F256-B-BGA112R; Supplier: Digikey; Supplier Part Number: 336-EFM32WG990F256-B-BGA112RTR-ND; RoHS: No; Item Type: IC
footprint 112-BGA (10x10)
pins: A1 PE15, A2 PE14, A3 PE12, A4 PE9, A5 PD10, A6 PF7, A7 PF5, A8 PF4, A9 PE4, A10 PC14, A11 PC15, B1 PA15, B2 PE13, B3 PE11, B4 PE8, B5 PD11, B6 PF8, B7 PF6, B8 PF3, B9 PE5, B10 PC12, B11 PC13, C1 PA1, C2 PA0, C3 PE10, C4 PD13, C5 PD12, C6 PF9, C7 VSS, C8 PF2, C9 PE6, C10 PC10, C11 PC11, D1 PA3, D2 PA2, D3 PB15, D4 VSS, D5 IOVDD_6, D6 PD9, D7 IOVDD_5, D8 PF1, D9 PE7, D10 PC8, D11 PC9, E1 PA6, E2 PA5, E3 PA4, E4 PB0, E8 PF0, E9 PE0, E10 PE1, E11 PE3, F1 PB1, F2 PB2, F3 PB3, F4 PB4, F8 VDD_DREG, F9 VSS_DREG, F10 PE2, F11 DECOUPLE, G1 PB5, G2 PB6, G3 VSS, G4 IOVDD_0, G8 IOVDD_4, G9 VSS, G10 PC6, G11 PC7, H1 PC0, H2 PC2, H3 PD14, H4 PA7, H5 PA8, H6 VSS, H7 IOVDD_3, H8 PD8, H9 PD5, H10 PD6, H11 PD7, J1 PC1, J2 PC3, J3 PD15, J4 PA12, J5 PA9, J6 PA10, J7 PB9, J8 PB10, J9 PD2, J10 PD3, J11 PD4, K1 PB7, K2 PC4, K3 PA13, K4 VSS, K5 PA11, K6 RESETn, K7 AVSS_1, K8 AVDD_2, K9 AVDD_1, K10 AVSS_0, K11 PD1, L1 PB8, L2 PC5, L3 PA14, L4 IOVDD_1, L5 PB11, L6 PB12, L7 AVSS_2, L8 PB13, L9 PB14, L10 AVDD_0, L11 PD0

## ESP32-C3-MINI-1U-H4
designator U?
SMD,12.5x13.2mm WiFi Modules ROHS; Manufacturer: Espressif Systems; Manufacturer Part Number: ESP32-C3-MINI-1U-H4; Item Type: IC; LCSC Part Number: C3013922; Package: SMD,12.5x13.2mm
footprint ESP32-C3-MINI-1U-H4.
pins: 1 GND, 2 GND, 3 3V3, 4 NC, 5 IO2, 6 IO3, 7 NC, 8 EN, 9 NC, 10 NC, 11 GND, 12 IO0, 13 IO1, 14 GNDNC, 15 NC, 16 IO10, 17 NC, 18 IO4, 19 IO5, 20 IO6, 21 IO7, 22 IO8, 23 IO9, 24 NC, 25 NC, 26 IO18, 27 IO19, 28 NC, 29 NC, 30 RXD0, 31 TXD0, 32 NC, 33 NC, 34 NC, 35 NC, 36 GND, 37 GND, 38 GND, 39 GND, 40 GND, 41 GND, 42 GND, 43 GND, 44 GND, 45 GND, 46 GND, 47 GND, 48 GND, 49 GND, 50 GND, 51 GND, 52 GND, 53 GND

## ESP32-C3FH4
designator U?
RF TXRX MODULE BLUETOOTH SMD; Manufacturer: Espressif Systems; Manufacturer Part Number: ESP32-C3FH4; Item Type: IC; Supplier: Digikey; Supplier Part Number: 1904-ESP32-C3FH4CT-ND; RoHS: No; Category: Uncategorized; Stock: 7160; Pricing: 1=1.3 (USD); LCSC Part Number: C2858491
footprint 32-QFN (5x5) (32pins, 5x5mm body, 0.5mm pitch QFN package)
pins: 1 LNA_IN, 2 VDD3P3, 3 VDD3P3, 4 XTAL_32K_P, 5 XTAL_32K_N, 6 GPIO2, 7 CHIP_EN, 8 GPIO3, 9 MTMS, 10 MTDI, 11 VDD3P3_RTC, 12 MTCK, 13 MTDO, 14 GPIO8, 15 GPIO9, 16 GPIO10, 17 VDD3P3_CPU, 18 VDD_SPI, 19 SPIHD, 20 SPIWP, 21 SPICS0, 22 SPICLK, 23 SPID, 24 SPIQ, 25 GPIO18, 26 GPIO19, 27 U0RXD, 28 U0TXD, 29 XTAL_N, 30 XTAL_P, 31 VDDA, 32 VDDA, 33 GND

## ESP32-S3-WROOM-1-N8
designator U?
ESP32-S3 chip 2.4GHz SMD,18x25.5mm WiFi Modules ROHS; Manufacturer: Expressif System; Manufacturer Part Number: ESP32-S3-WROOM-1-N8; Item Type: IC; Package: SMD,18x25.5mm; LCSC Part Number: C2913198; ComponentLink1URL: https://www.lcsc.com/product-detail/WiFi-Modules_Espressif-Systems-ESP32-S3-WROOM-1-N8_C2913198.html; ComponentLink1Description: LCSC
footprint 41-SMD Module
pins: 1 GND, 2 3V3, 3 EN, 4 IO4, 5 IO5, 6 IO6, 7 IO7, 8 IO15, 9 IO16, 10 IO17, 11 IO18, 12 IO8, 13 IO19, 14 IO20, 15 IO3, 16 IO46, 17 IO9, 18 IO10, 19 IO11, 20 IO12, 21 IO13, 22 IO14, 23 IO21, 24 IO47, 25 IO48, 26 IO45, 27 IO0, 28 IO35, 29 IO36, 30 IO37, 31 IO38, 32 IO39, 33 IO40, 34 IO41, 35 IO42, 36 RXD0, 37 TXD0, 38 IO2, 39 IO1, 40 GND, 41 E-PAD

## ESP32-S3FH4R2
designator U?
21dBm ESP32-S3R8 2.4GHz SMD WiFi Modules ROHS; Manufacturer: Espressif Systems; Manufacturer Part Number: ESP32-S3FH4R2; Item Type: IC; Supplier: Mouser; Supplier Part Number: 356-ESP32-S3FH4R2; RoHS: No; Stock: 2650; Pricing: 1=2.32, 10=2.32, 50=2.32, 100=2.32, 1000=2.32, 10000=2.32 (USD); LCSC Part Number: C3013940; ComponentLink1Description: LCSC; ComponentLink1URL: https://www.lcsc.com/product-detail/WiFi-Modules_Espressif-Systems-ESP32-S3FH4R2_C3013940.html
footprint QFNWB-56 (7×7)
pins: 1 LNA_IN, 2 VDD3P3, 3 VDD3P3, 4 CHIP_PU, 5 GPIO0, 6 GPIO1, 7 GPIO2, 8 GPIO3, 9 GPIO4, 10 GPIO5, 11 GPIO6, 12 GPIO7, 13 GPIO8, 14 GPIO9, 15 GPIO10, 16 GPIO11, 17 GPIO12, 18 GPIO13, 19 GPIO14, 20 VDD3P3_RTC, 21 XTAL_32K_P, 22 XTAL_32K_N, 23 GPIO17, 24 GPIO18, 25 GPIO19, 26 GPIO20, 27 GPIO21, 28 SPICS1, 29 VDD_SPI, 30 SPIHD, 31 SPIWP, 32 SPICS0, 33 SPICLK, 34 SPIQ, 35 SPID, 36 SPICLK_N, 37 SPICLK_P, 38 GPIO33, 39 GPIO34, 40 GPIO35, 41 GPIO36, 42 GPIO37, 43 GPIO38, 44 MTCK, 45 MTDO, 46 VDD3P3_CPU, 47 MTDI, 48 MTMS, 49 U0TXD, 50 U0RXD, 51 GPIO45, 52 GPIO46, 53 XTAL_N, 54 XTAL_P, 55 VDDA, 56 VDDA, 57 GND

## ESP32-S3R8
designator U?
SMD IC ESP32-S3R8, DUAL-CORE MCU; Manufacturer: Espressif Systems; Supplier 1: Mouser; Manufacturer Part Number: ESP32-S3R8; RoHS: No; Category: RF Receivers, Transceivers; Stock 1: 2366; Pricing 1: 1=2.46, 10=2.46, 50=2.46, 100=2.46, 1000=2.46, 10000=2.46 (USD); Supplier Part Number 1: 356-ESP32-S3R8; Item Type: IC
footprint 56-QFN (7x7)
pins: 1 LNA_IN, 2 VDD3P3, 3 VDD3P3, 4 CHIP_PU, 5 GPIO0, 6 GPIO1, 7 GPIO2, 8 GPIO3, 9 GPIO4, 10 GPIO5, 11 GPIO6, 12 GPIO7, 13 GPIO8, 14 GPIO9, 15 GPIO10, 16 GPIO11, 17 GPIO12, 18 GPIO13, 19 GPIO14, 20 VDD3P3_RTC, 21 XTAL_32K_P, 22 XTAL_32K_N, 23 GPIO17, 24 GPIO18, 25 GPIO19, 26 GPIO20, 27 GPIO21, 28 SPICS1, 29 VDD_SPI, 30 SPIHD, 31 SPIWP, 32 SPICS0, 33 SPICLK, 34 SPIQ, 35 SPID, 36 SPICLK_N, 37 SPICLK_P, 38 GPIO33, 39 GPIO34, 40 GPIO35, 41 GPIO36, 42 GPIO37, 43 GPIO38, 44 MTCK, 45 MTDO, 46 VDD3P3_CPU, 47 MTDI, 48 MTMS, 49 U0TXD, 50 U0RXD, 51 GPIO45, 52 GPIO46, 53 XTAL_N, 54 XTAL_P, 55 VDDA, 56 VDDA, 57 GND

## IS2066B
designator U?
Bluetooth 5.0 Dual-mode Radio Transceiver; Manufacturer: Microchip; Manufacturer Part Number: IS2066B; Item Type: IC; Package: 50-VFBGA (5x3.5); ComponentLink1Description: LCSC; ComponentLink1URL: https://www.lcsc.com/product-detail/Schottky-Barrier-Diodes-SBD_LRC-LBAT54HT1G_C12744.html
footprint 50-VFBGA (5x3.5)
pins: A1 AOHPM, A2 AOHPR, A3 VDDA, A4 VBG, A5 CLDO_O, A6 RTX/RF_RTX, A7 VCC_RF, A8 XO_P, A9 XO_N, B1 AOHPL, B2 HCI_RXD, B3 ULPC_VSUS, B4 P2_7, B5 P0_2, B6 P0_0, B7 P1_3, B8 P1_5, B9 RFLDO_O, C1 MIC_N1, C2 HCI_TXD, C4 GND, C5 GND, C6 GND, C8 P0_3, C9 BK2_VDD, D1 MIC_P1, D2 VCOM, D4 GND, D5 GND, D6 GND, D8 MFB, D9 BK2_LX, E1 VDD_IO, E2 MIC_BIAS, E3 VDD_CORE, E4 RST_N, E5 P2_0, E6 AMB_DET, E7 LED1, E8 LED2, E9 BK2_0, F1 ADAP_IN, F2 BAT_IN, F3 SYS_PWR, F4 BK1_VDD, F5 BK1_LX, F6 BK1_0, F7 LDO31_VO, F8 LDO_VIN, F9 CODEC_VO

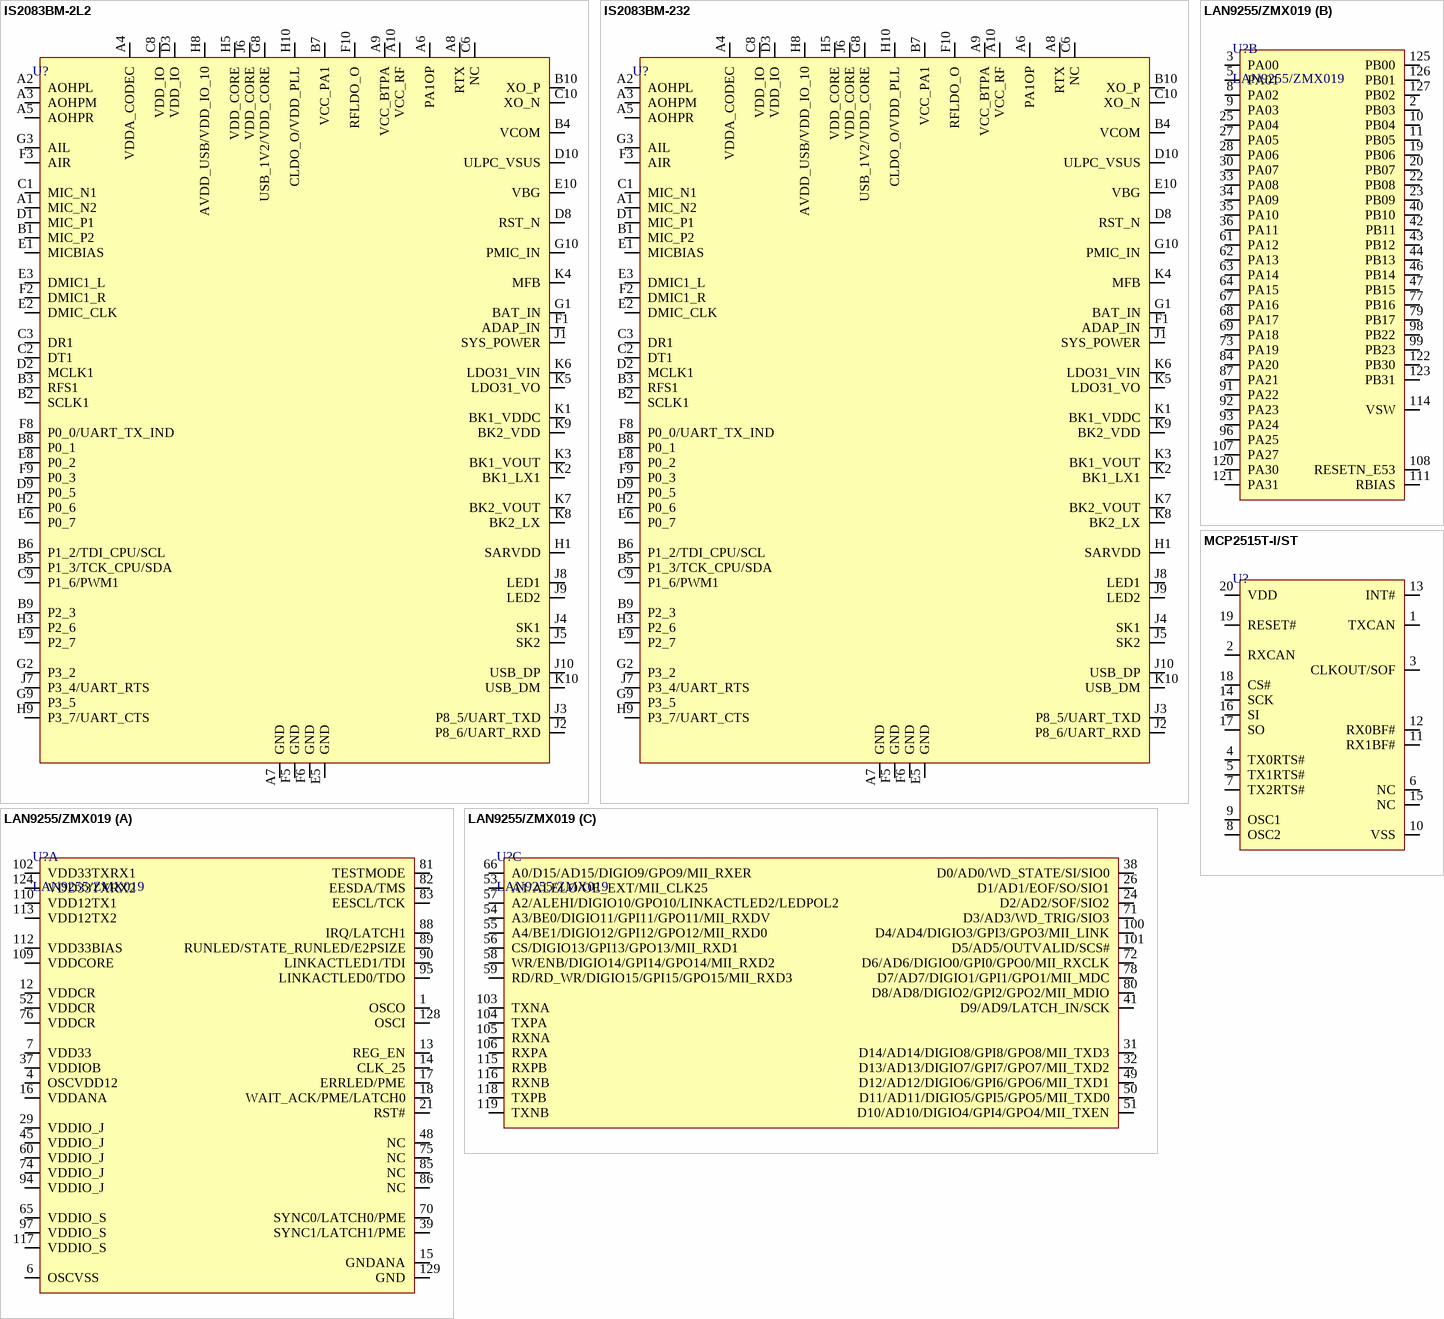
[diagram p3: symbols IS2083BM-2L2 to MCP2515T-I/ST]

## IS2083BM-2L2
designator U?
RF TXRX MODULE BLUETOOTH SMD; Manufacturer: Microchip; Manufacturer Part Number: IS2083BM-2L2; Item Type: IC; Package: 82-VFBGA
footprint 82-VFBGA
pins: A1 MIC_N2, A2 AOHPL, A3 AOHPM, A4 VDDA_CODEC, A5 AOHPR, A6 PA1OP, A7 GND, A8 RTX, A9 VCC_BTPA, A10 VCC_RF, B1 MIC_P2, B2 SCLK1, B3 RFS1, B4 VCOM, B5 P1_3/TCK_CPU/SDA, B6 P1_2/TDI_CPU/SCL, B7 VCC_PA1, B8 P0_1, B9 P2_3, B10 XO_P, C1 MIC_N1, C2 DT1, C3 DR1, C6 NC, C8 VDD_IO, C9 P1_6/PWM1, C10 XO_N, D1 MIC_P1, D2 MCLK1, D3 VDD_IO, D8 RST_N, D9 P0_5, D10 ULPC_VSUS, E1 MICBIAS, E2 DMIC_CLK, E3 DMIC1_L, E5 GND, E6 P0_7, E8 P0_2, E9 P2_7, E10 VBG, F1 ADAP_IN, F2 DMIC1_R, F3 AIR, F5 GND, F6 GND, F8 P0_0/UART_TX_IND, F9 P0_3, F10 RFLDO_O, G1 BAT_IN, G2 P3_2, G3 AIL, G8 USB_1V2/VDD_CORE, G9 P3_5, G10 PMIC_IN, H1 SARVDD, H2 P0_6, H3 P2_6, H5 VDD_CORE, H8 AVDD_USB/VDD_IO_10, H9 P3_7/UART_CTS, H10 CLDO_O/VDD_PLL, J1 SYS_POWER, J2 P8_6/UART_RXD, J3 P8_5/UART_TXD, J4 SK1, J5 SK2, J6 VDD_CORE, J7 P3_4/UART_RTS, J8 LED1, J9 LED2, J10 USB_DP, K1 BK1_VDDC, K2 BK1_LX1, K3 BK1_VOUT, K4 MFB, K5 LDO31_VO, K6 LDO31_VIN, K7 BK2_VOUT, K8 BK2_LX, K9 BK2_VDD, K10 USB_DM

## IS2083BM-232
designator U?
RF TXRX MODULE BLUETOOTH SMD; Manufacturer: Microchip Technology; Manufacturer Part Number: IS2083BM-232; Item Type: IC; Package: 82-VFBGA
footprint 82-VFBGA
pins: A1 MIC_N2, A2 AOHPL, A3 AOHPM, A4 VDDA_CODEC, A5 AOHPR, A6 PA1OP, A7 GND, A8 RTX, A9 VCC_BTPA, A10 VCC_RF, B1 MIC_P2, B2 SCLK1, B3 RFS1, B4 VCOM, B5 P1_3/TCK_CPU/SDA, B6 P1_2/TDI_CPU/SCL, B7 VCC_PA1, B8 P0_1, B9 P2_3, B10 XO_P, C1 MIC_N1, C2 DT1, C3 DR1, C6 NC, C8 VDD_IO, C9 P1_6/PWM1, C10 XO_N, D1 MIC_P1, D2 MCLK1, D3 VDD_IO, D8 RST_N, D9 P0_5, D10 ULPC_VSUS, E1 MICBIAS, E2 DMIC_CLK, E3 DMIC1_L, E5 GND, E6 P0_7, E8 P0_2, E9 P2_7, E10 VBG, F1 ADAP_IN, F2 DMIC1_R, F3 AIR, F5 GND, F6 GND, F8 P0_0/UART_TX_IND, F9 P0_3, F10 RFLDO_O, G1 BAT_IN, G2 P3_2, G3 AIL, G8 USB_1V2/VDD_CORE, G9 P3_5, G10 PMIC_IN, H1 SARVDD, H2 P0_6, H3 P2_6, H5 VDD_CORE, H8 AVDD_USB/VDD_IO_10, H9 P3_7/UART_CTS, H10 CLDO_O/VDD_PLL, J1 SYS_POWER, J2 P8_6/UART_RXD, J3 P8_5/UART_TXD, J4 SK1, J5 SK2, J6 VDD_CORE, J7 P3_4/UART_RTS, J8 LED1, J9 LED2, J10 USB_DP, K1 BK1_VDDC, K2 BK1_LX1, K3 BK1_VOUT, K4 MFB, K5 LDO31_VO, K6 LDO31_VIN, K7 BK2_VOUT, K8 BK2_LX, K9 BK2_VDD, K10 USB_DM

## LAN9255/ZMX019
designator U?
IC ETHERCAT SLAVE CONTROLLER; Manufacturer: Microchip; Manufacturer Part Number: LAN9255-I/ZMX019; Supplier 1: Digi-Key; Stock 1: 70; Pricing 1: 1=17.76000, 25=16.18480 (USD); Supplier Part Number 1: 150-LAN9255-I/ZMX019-ND
footprint LAN9255/ZMX019
part A pins: 1 OSCO, 4 OSCVDD12, 6 OSCVSS, 7 VDD33, 12 VDDCR, 13 REG_EN, 14 CLK_25, 15 GNDANA, 16 VDDANA, 17 ERRLED/PME, 18 WAIT_ACK/PME/LATCH0, 21 RST#, 29 VDDIO_J, 37 VDDIOB, 39 SYNC1/LATCH1/PME, 45 VDDIO_J, 48 NC, 52 VDDCR, 60 VDDIO_J, 65 VDDIO_S, 70 SYNC0/LATCH0/PME, 74 VDDIO_J, 75 NC, 76 VDDCR, 81 TESTMODE, 82 EESDA/TMS, 83 EESCL/TCK, 85 NC, 86 NC, 88 IRQ/LATCH1, 89 RUNLED/STATE_RUNLED/E2PSIZE, 90 LINKACTLED1/TDI, 94 VDDIO_J, 95 LINKACTLED0/TDO, 97 VDDIO_S, 102 VDD33TXRX1, 109 VDDCORE, 110 VDD12TX1, 112 VDD33BIAS, 113 VDD12TX2, 117 VDDIO_S, 124 VDD33TXRX2, 128 OSCI, 129 GND
part B pins: 2 PB03, 3 PA00, 5 PA01, 8 PA02, 9 PA03, 10 PB04, 11 PB05, 19 PB06, 20 PB07, 22 PB08, 23 PB09, 25 PA04, 27 PA05, 28 PA06, 30 PA07, 33 PA08, 34 PA09, 35 PA10, 36 PA11, 40 PB10, 42 PB11, 43 PB12, 44 PB13, 46 PB14, 47 PB15, 61 PA12, 62 PA13, 63 PA14, 64 PA15, 67 PA16, 68 PA17, 69 PA18, 73 PA19, 77 PB16, 79 PB17, 84 PA20, 87 PA21, 91 PA22, 92 PA23, 93 PA24, 96 PA25, 98 PB22, 99 PB23, 107 PA27, 108 RESETN_E53, 111 RBIAS, 114 VSW, 120 PA30, 121 PA31, 122 PB30, 123 PB31, 125 PB00, 126 PB01, 127 PB02
part C pins: 24 D2/AD2/SOF/SIO2, 26 D1/AD1/EOF/SO/SIO1, 31 D14/AD14/DIGIO8/GPI8/GPO8/MII_TXD3, 32 D13/AD13/DIGIO7/GPI7/GPO7/MII_TXD2, 38 D0/AD0/WD_STATE/SI/SIO0, 41 D9/AD9/LATCH_IN/SCK, 49 D12/AD12/DIGIO6/GPI6/GPO6/MII_TXD1, 50 D11/AD11/DIGIO5/GPI5/GPO5/MII_TXD0, 51 D10/AD10/DIGIO4/GPI4/GPO4/MII_TXEN, 53 A1/ALELO/OE_EXT/MII_CLK25, 54 A3/BE0/DIGIO11/GPI11/GPO11/MII_RXDV, 55 A4/BE1/DIGIO12/GPI12/GPO12/MII_RXD0, 56 CS/DIGIO13/GPI13/GPO13/MII_RXD1, 57 A2/ALEHI/DIGIO10/GPO10/LINKACTLED2/LEDPOL2, 58 WR/ENB/DIGIO14/GPI14/GPO14/MII_RXD2, 59 RD/RD_WR/DIGIO15/GPI15/GPO15/MII_RXD3, 66 A0/D15/AD15/DIGIO9/GPO9/MII_RXER, 71 D3/AD3/WD_TRIG/SIO3, 72 D6/AD6/DIGIO0/GPI0/GPO0/MII_RXCLK, 78 D7/AD7/DIGIO1/GPI1/GPO1/MII_MDC, 80 D8/AD8/DIGIO2/GPI2/GPO2/MII_MDIO, 100 D4/AD4/DIGIO3/GPI3/GPO3/MII_LINK, 101 D5/AD5/OUTVALID/SCS#, 103 TXNA, 104 TXPA, 105 RXNA, 106 RXPA, 115 RXPB, 116 RXNB, 118 TXPB, 119 TXNB

## MCP2515T-I/ST
designator U?
IC CAN CONTROLLER W/SPI 20TSSOP; Manufacturer: Microchip; Manufacturer Part Number: MCP2515T-I/ST; Data Rate: 1Mbps; Max Supply Voltage: 5.5V; Min Supply Voltage: 2.7V; Interface: SPI,CAN; Number of Transmit Buffers: 3; Number of Receive Buffers: 2; Number of Interrupts: 1; Operating Supply Voltage: 5V; Max Supply Current: 10mA; Supplier: Digikey; LCSC Part Number: C185941; RoHS: Yes; Item Type: IC; Stock: 8418; Pricing: 1=2.67, 25=2.23, 100=2.03 (USD); Mounting Technology: Surface Mount; Case/Package: TSSOP; Pins: 20; Min Operating Temperature: -40°C; Max Operating Temperature: 85°C; Packaging: Tape and Reel; Package Quantity: 2500; Number of Transceivers: 1; Number of Drivers: 1; Number of Receivers: 1; Series: -; Supply Current: 10mA; Nominal Supply Voltage: 5.5V; Length: 6.6mm; Width: 4.5mm; Height: 1.05mm; Radiation Hardening: No; Reach SVHC Compliant: No; Lead Free: Lead Free; RoHS Compliant: Yes; ComponentLink1URL: https://datasheet.ciiva.com/1495/1669372-1495293.pdf?src-supplier=Element14; ComponentLink1Description: https://datasheet.ciiva.com/1495/1669372-1495293.pdf?src-supplier=Element14; ComponentLink2URL: https://datasheet.ciiva.com/1495/1669372-1495085.pdf?src-supplier=Element14; ComponentLink2Description: https://datasheet.ciiva.com/1495/1669372-1495085.pdf?src-supplier=Element14; ComponentLink3URL: https://datasheet.ciiva.com/8084/21801e-8084590.pdf?src-supplier=Avnet; ComponentLink3Description: https://datasheet.ciiva.com/8084/21801e-8084590.pdf?src-supplier=Avnet; ComponentLink4URL: https://datasheet.ciiva.com/26818/getdatasheetpartid-446810-26818853.pdf?src-supplier=Verical; ComponentLink4Description: https://datasheet.ciiva.com/26818/getdatasheetpartid-446810-26818853.pdf?src-supplier=Verical; ComponentLink5URL: https://datasheet.ciiva.com/29118/filehandler-aspxddocname-en011733-29118715.pdf?src-supplier=Digikey; ComponentLink5Description: https://datasheet.ciiva.com/29118/filehandler-aspxddocname-en011733-29118715.pdf?src-supplier=Digikey; ComponentLink6URL: https://datasheet.ciiva.com/14152/mcp2515-eng-tds-14152536.pdf?src-supplier=Distrelec; ComponentLink6Description: https://datasheet.ciiva.com/14152/mcp2515-eng-tds-14152536.pdf?src-supplier=Distrelec; ComponentLink7URL: https://datasheet.ciiva.com/1503/21801e-1503903.pdf?src-supplier=Farnell; ComponentLink7Description: https://datasheet.ciiva.com/1503/21801e-1503903.pdf?src-supplier=Farnell; ComponentLink8URL: https://datasheet.ciiva.com/16200/filehandler-aspxddocname-en011733-16200958.pdf?src-supplier=Future+Electronics; ComponentLink8Description: https://datasheet.ciiva.com/16200/filehandler-aspxddocname-en011733-16200958.pdf?src-supplier=Future+Electronics; ComponentLink9URL: https://datasheet.ciiva.com/1696/21801g-1696565.pdf?src-supplier=Digikey; ComponentLink9Description: https://datasheet.ciiva.com/1696/21801g-1696565.pdf?src-supplier=Digikey; ComponentLink10URL: https://datasheet.ciiva.com/29118/filehandler-aspxddocname-en011733-29118716.pdf?src-supplier=Digikey; ComponentLink10Description: https://datasheet.ciiva.com/29118/filehandler-aspxddocname-en011733-29118716.pdf?src-supplier=Digikey; ComponentLink11URL: https://datasheet.ciiva.com/29118/filehandler-aspxddocname-en011733-29118714.pdf?src-supplier=Digikey; ComponentLink11Description: https://datasheet.ciiva.com/29118/filehandler-aspxddocname-en011733-29118714.pdf?src-supplier=Digikey
footprint TSSOP-20
pins: 1 TXCAN, 2 RXCAN, 3 CLKOUT/SOF, 4 TX0RTS#, 5 TX1RTS#, 6 NC, 7 TX2RTS#, 8 OSC2, 9 OSC1, 10 VSS, 11 RX1BF#, 12 RX0BF#, 13 INT#, 14 SCK, 15 NC, 16 SI, 17 SO, 18 CS#, 19 RESET#, 20 VDD

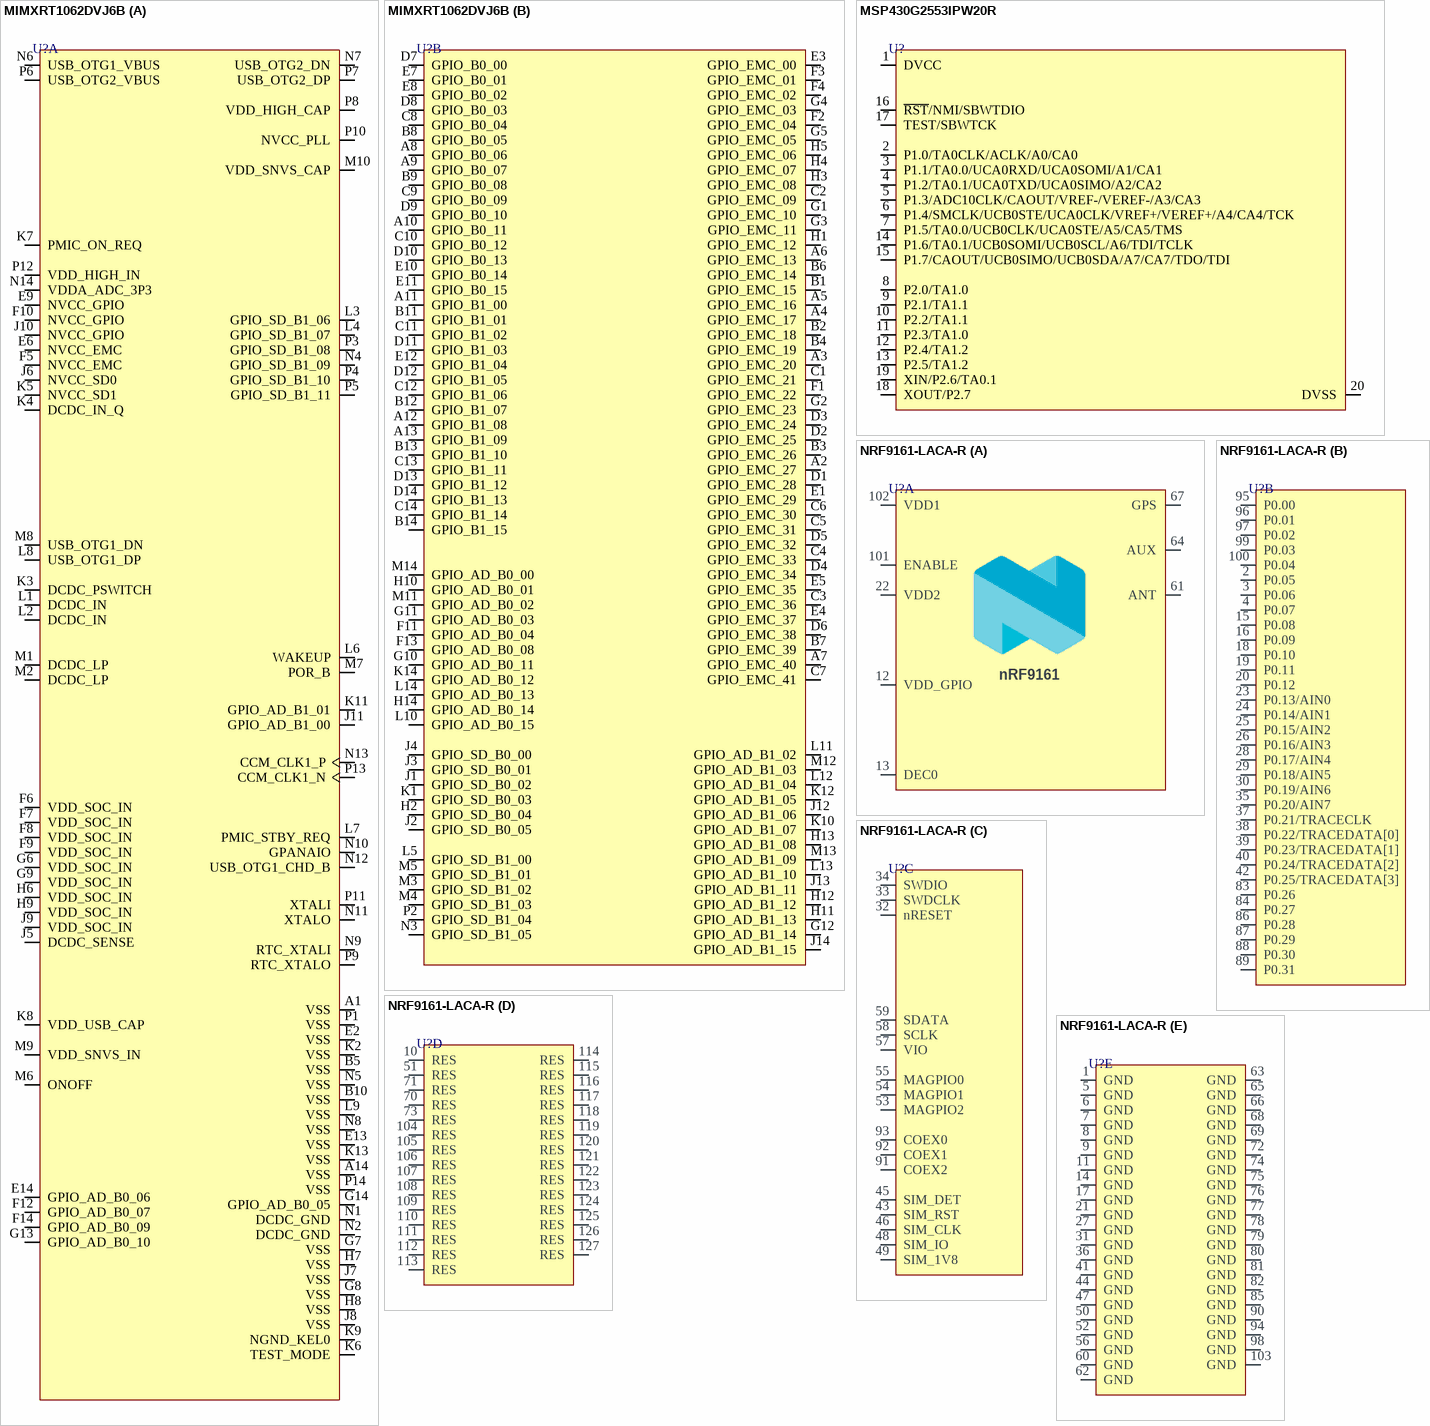
[diagram p4: symbols MIMXRT1062DVJ6B to NRF9161-LACA-R]

## MIMXRT1062DVJ6B
designator U?
IC MCU 32BIT EXT MEM 196LFBGA; Manufacturer: NXP Semiconductors; Manufacturer Part Number: MIMXRT1062DVJ6B; Supplier: Digi-Key; Supplier Part Number: 568-MIMXRT1062DVJ6B-ND; RoHS: Yes; Category: Uncategorized; Stock: 1142; Pricing: 1=15.93, 10=12.734, 189=10.75497, 567=10.68896, 945=10.09187 (USD)
footprint 196-LFBGA (12x12)
part A pins: A1 VSS, A14 VSS, B5 VSS, B10 VSS, E2 VSS, E6 NVCC_EMC, E9 NVCC_GPIO, E13 VSS, E14 GPIO_AD_B0_06, F5 NVCC_EMC, F6 VDD_SOC_IN, F7 VDD_SOC_IN, F8 VDD_SOC_IN, F9 VDD_SOC_IN, F10 NVCC_GPIO, F12 GPIO_AD_B0_07, F14 GPIO_AD_B0_09, G6 VDD_SOC_IN, G7 VSS, G8 VSS, G9 VDD_SOC_IN, G13 GPIO_AD_B0_10, G14 GPIO_AD_B0_05, H6 VDD_SOC_IN, H7 VSS, H8 VSS, H9 VDD_SOC_IN, J5 DCDC_SENSE, J6 NVCC_SD0, J7 VSS, J8 VSS, J9 VDD_SOC_IN, J10 NVCC_GPIO, J11 GPIO_AD_B1_00, K2 VSS, K3 DCDC_PSWITCH, K4 DCDC_IN_Q, K5 NVCC_SD1, K6 TEST_MODE, K7 PMIC_ON_REQ, K8 VDD_USB_CAP, K9 NGND_KEL0, K11 GPIO_AD_B1_01, K13 VSS, L1 DCDC_IN, L2 DCDC_IN, L3 GPIO_SD_B1_06, L4 GPIO_SD_B1_07, L6 WAKEUP, L7 PMIC_STBY_REQ, L8 USB_OTG1_DP, L9 VSS, M1 DCDC_LP, M2 DCDC_LP, M6 ONOFF, M7 POR_B, M8 USB_OTG1_DN, M9 VDD_SNVS_IN, M10 VDD_SNVS_CAP, N1 DCDC_GND, N2 DCDC_GND, N4 GPIO_SD_B1_09, N5 VSS, N6 USB_OTG1_VBUS, N7 USB_OTG2_DN, N8 VSS, N9 RTC_XTALI, N10 GPANAIO, N11 XTALO, N12 USB_OTG1_CHD_B, N13 CCM_CLK1_P, N14 VDDA_ADC_3P3, P1 VSS, P3 GPIO_SD_B1_08, P4 GPIO_SD_B1_10, P5 GPIO_SD_B1_11, P6 USB_OTG2_VBUS, P7 USB_OTG2_DP, P8 VDD_HIGH_CAP, P9 RTC_XTALO, P10 NVCC_PLL, P11 XTALI, P12 VDD_HIGH_IN, P13 CCM_CLK1_N, P14 VSS
part B pins: A2 GPIO_EMC_27, A3 GPIO_EMC_20, A4 GPIO_EMC_17, A5 GPIO_EMC_16, A6 GPIO_EMC_13, A7 GPIO_EMC_40, A8 GPIO_B0_06, A9 GPIO_B0_07, A10 GPIO_B0_11, A11 GPIO_B1_00, A12 GPIO_B1_08, A13 GPIO_B1_09, B1 GPIO_EMC_15, B2 GPIO_EMC_18, B3 GPIO_EMC_26, B4 GPIO_EMC_19, B6 GPIO_EMC_14, B7 GPIO_EMC_39, B8 GPIO_B0_05, B9 GPIO_B0_08, B11 GPIO_B1_01, B12 GPIO_B1_07, B13 GPIO_B1_10, B14 GPIO_B1_15, C1 GPIO_EMC_21, C2 GPIO_EMC_09, C3 GPIO_EMC_36, C4 GPIO_EMC_33, C5 GPIO_EMC_31, C6 GPIO_EMC_30, C7 GPIO_EMC_41, C8 GPIO_B0_04, C9 GPIO_B0_09, C10 GPIO_B0_12, C11 GPIO_B1_02, C12 GPIO_B1_06, C13 GPIO_B1_11, C14 GPIO_B1_14, D1 GPIO_EMC_28, D2 GPIO_EMC_25, D3 GPIO_EMC_24, D4 GPIO_EMC_34, D5 GPIO_EMC_32, D6 GPIO_EMC_38, D7 GPIO_B0_00, D8 GPIO_B0_03, D9 GPIO_B0_10, D10 GPIO_B0_13, D11 GPIO_B1_03, D12 GPIO_B1_05, D13 GPIO_B1_12, D14 GPIO_B1_13, E1 GPIO_EMC_29, E3 GPIO_EMC_00, E4 GPIO_EMC_37, E5 GPIO_EMC_35, E7 GPIO_B0_01, E8 GPIO_B0_02, E10 GPIO_B0_14, E11 GPIO_B0_15, E12 GPIO_B1_04, F1 GPIO_EMC_22, F2 GPIO_EMC_04, F3 GPIO_EMC_01, F4 GPIO_EMC_02, F11 GPIO_AD_B0_04, F13 GPIO_AD_B0_08, G1 GPIO_EMC_10, G2 GPIO_EMC_23, G3 GPIO_EMC_11, G4 GPIO_EMC_03, G5 GPIO_EMC_05, G10 GPIO_AD_B0_11, G11 GPIO_AD_B0_03, G12 GPIO_AD_B1_14, H1 GPIO_EMC_12, H2 GPIO_SD_B0_04, H3 GPIO_EMC_08, H4 GPIO_EMC_07, H5 GPIO_EMC_06, H10 GPIO_AD_B0_01, H11 GPIO_AD_B1_13, H12 GPIO_AD_B1_12, H13 GPIO_AD_B1_08, H14 GPIO_AD_B0_14, J1 GPIO_SD_B0_02, J2 GPIO_SD_B0_05, J3 GPIO_SD_B0_01, J4 GPIO_SD_B0_00, J12 GPIO_AD_B1_06, J13 GPIO_AD_B1_11, J14 GPIO_AD_B1_15, K1 GPIO_SD_B0_03, K10 GPIO_AD_B1_07, K12 GPIO_AD_B1_05, K14 GPIO_AD_B0_12, L5 GPIO_SD_B1_00, L10 GPIO_AD_B0_15, L11 GPIO_AD_B1_02, L12 GPIO_AD_B1_04, L13 GPIO_AD_B1_10, L14 GPIO_AD_B0_13, M3 GPIO_SD_B1_02, M4 GPIO_SD_B1_03, M5 GPIO_SD_B1_01, M11 GPIO_AD_B0_02, M12 GPIO_AD_B1_03, M13 GPIO_AD_B1_09, M14 GPIO_AD_B0_00, N3 GPIO_SD_B1_05, P2 GPIO_SD_B1_04

## MSP430G2553IPW20R
designator U?
IC MCU 16BIT 16KB FLASH 20TSSOP; Manufacturer: Texas Instruments; Manufacturer Part Number: MSP430G2553IPW20R; Supplier: Arrow Electronics; Supplier Part Number: MSP430G2553IPW20R; RoHS: Yes; Category: Microcontrollers; Stock: 2433; Pricing: 1=2.9441, 10=2.6437, 25=2.4938, 100=2.1248, 250=1.9952, 500=1.7458, 1000=1.4465, 2000=1.4079 (USD); ComponentLink1URL: https://datasheet.ciiva.com/6659/msp430g2553-6659151.pdf?src-supplier=Digi-Key; ComponentLink1Description: https://datasheet.ciiva.com/6659/msp430g2553-6659151.pdf?src-supplier=Digi-Key; LCSC Part Number: C53923; Item Type: IC
footprint TSSOP-20
pins: 1 DVCC, 2 P1.0/TA0CLK/ACLK/A0/CA0, 3 P1.1/TA0.0/UCA0RXD/UCA0SOMI/A1/CA1, 4 P1.2/TA0.1/UCA0TXD/UCA0SIMO/A2/CA2, 5 P1.3/ADC10CLK/CAOUT/VREF-/VEREF-/A3/CA3, 6 P1.4/SMCLK/UCB0STE/UCA0CLK/VREF+/VEREF+/A4/CA4/TCK, 7 P1.5/TA0.0/UCB0CLK/UCA0STE/A5/CA5/TMS, 8 P2.0/TA1.0, 9 P2.1/TA1.1, 10 P2.2/TA1.1, 11 P2.3/TA1.0, 12 P2.4/TA1.2, 13 P2.5/TA1.2, 14 P1.6/TA0.1/UCB0SOMI/UCB0SCL/A6/TDI/TCLK, 15 P1.7/CAOUT/UCB0SIMO/UCB0SDA/A7/CA7/TDO/TDI, 16 ~{RST}/NMI/SBWTDIO, 17 TEST/SBWTCK, 18 XOUT/P2.7, 19 XIN/P2.6/TA0.1, 20 DVSS

## NRF9161-LACA-R
designator U?
IC RF TXRX+MCU CELL LTE-M/NB-IOT; Manufacturer: Nordic Semiconductor; Manufacturer Part Number: NRF9161-LACA-R; Supplier: Digikey; RoHS: No; Item Type: IC; Stock: 2306; Pricing: 1=27, 10=24.925, 25=22.8476, 100=21.1168, 250=20.07828, 500=18.69358 (USD)
footprint NRF9161-LACA-R
part A pins: 12 VDD_GPIO, 13 DEC0, 22 VDD2, 61 ANT, 64 AUX, 67 GPS, 101 ENABLE, 102 VDD1
part B pins: 2 P0.05, 3 P0.06, 4 P0.07, 15 P0.08, 16 P0.09, 18 P0.10, 19 P0.11, 20 P0.12, 23 P0.13/AIN0, 24 P0.14/AIN1, 25 P0.15/AIN2, 26 P0.16/AIN3, 28 P0.17/AIN4, 29 P0.18/AIN5, 30 P0.19/AIN6, 35 P0.20/AIN7, 37 P0.21/TRACECLK, 38 P0.22/TRACEDATA[0], 39 P0.23/TRACEDATA[1], 40 P0.24/TRACEDATA[2], 42 P0.25/TRACEDATA[3], 83 P0.26, 84 P0.27, 86 P0.28, 87 P0.29, 88 P0.30, 89 P0.31, 95 P0.00, 96 P0.01, 97 P0.02, 99 P0.03, 100 P0.04
part C pins: 32 nRESET, 33 SWDCLK, 34 SWDIO, 43 SIM_RST, 45 SIM_DET, 46 SIM_CLK, 48 SIM_IO, 49 SIM_1V8, 53 MAGPIO2, 54 MAGPIO1, 55 MAGPIO0, 57 VIO, 58 SCLK, 59 SDATA, 91 COEX2, 92 COEX1, 93 COEX0
part D pins: 10 RES, 51 RES, 70 RES, 71 RES, 73 RES, 104 RES, 105 RES, 106 RES, 107 RES, 108 RES, 109 RES, 110 RES, 111 RES, 112 RES, 113 RES, 114 RES, 115 RES, 116 RES, 117 RES, 118 RES, 119 RES, 120 RES, 121 RES, 122 RES, 123 RES, 124 RES, 125 RES, 126 RES, 127 RES
part E pins: 1 GND (power), 5 GND (power), 6 GND, 7 GND, 8 GND, 9 GND (power), 11 GND, 14 GND (power), 17 GND (power), 21 GND (power), 27 GND (power), 31 GND (power), 36 GND (power), 41 GND (power), 44 GND (power), 47 GND (power), 50 GND (power), 52 GND (power), 56 GND (power), 60 GND (power), 62 GND (power), 63 GND (power), 65 GND (power), 66 GND (power), 68 GND, 69 GND, 72 GND (power), 74 GND (power), 75 GND (power), 76 GND (power), 77 GND (power), 78 GND (power), 79 GND (power), 80 GND (power), 81 GND (power), 82 GND (power), 85 GND (power), 90 GND (power), 94 GND (power), 98 GND (power), 103 GND (power)
part A text: nRF9161

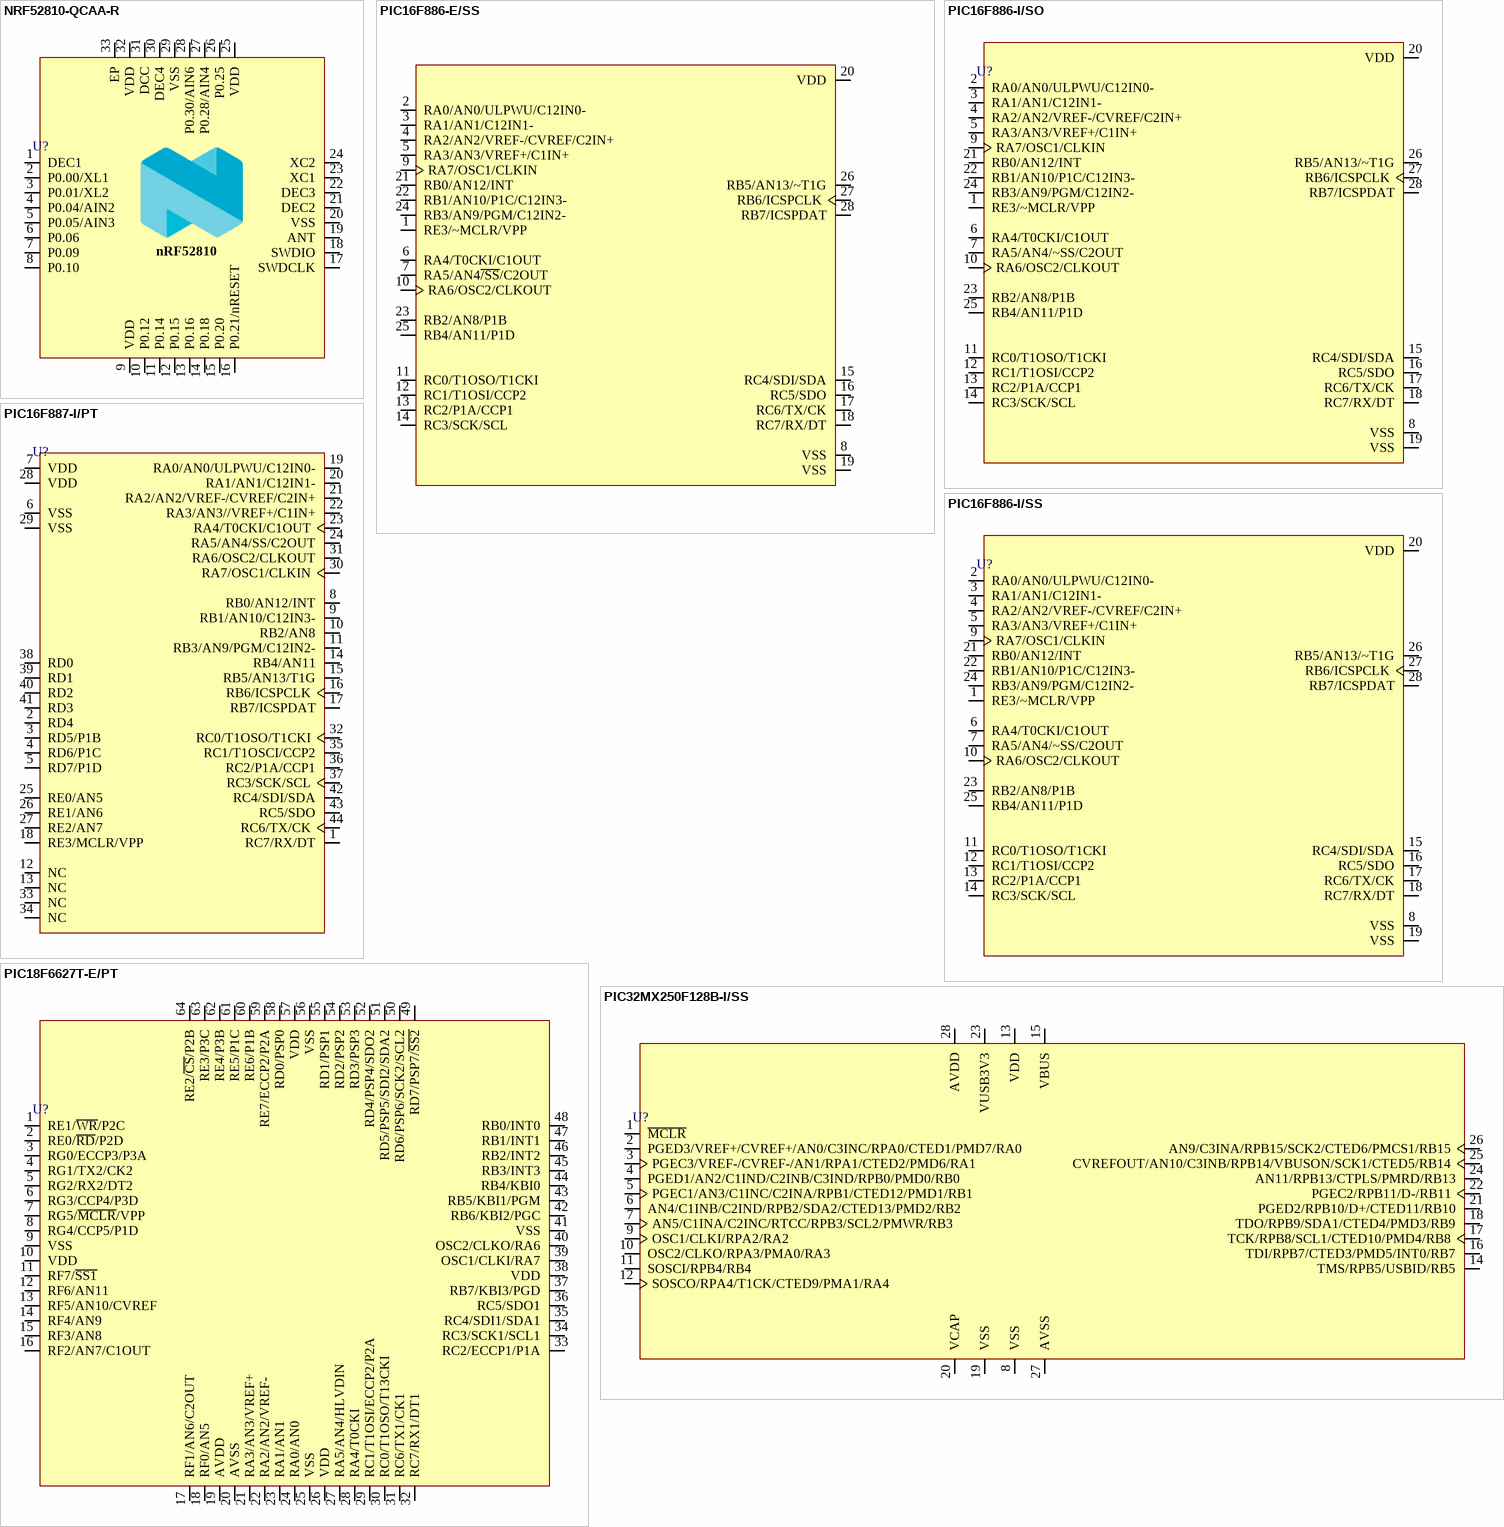
[diagram p5: symbols NRF52810-QCAA-R to PIC32MX250F128B-I/SS]

## NRF52810-QCAA-R
designator U?
IC RF TXRX+MCU BLE 32QFN; Manufacturer: Nordic Semiconductor; Manufacturer Part Number: NRF52810-QCAA-R; Supplier: Digikey; LCSC Part Number: C519278; RoHS: Yes; Item Type: IC; Stock: 11942; Pricing: 1=2.26, 100=1.92, 500=1.67, 1000=1.52 (USD); RoHS Compliant: Yes
footprint 32-QFN (5x5) (32pins, 5x5mm body, 0.5mm pitch QFN package)
pins: 1 DEC1, 2 P0.00/XL1, 3 P0.01/XL2, 4 P0.04/AIN2, 5 P0.05/AIN3, 6 P0.06, 7 P0.09, 8 P0.10, 9 VDD, 10 P0.12, 11 P0.14, 12 P0.15, 13 P0.16, 14 P0.18, 15 P0.20, 16 P0.21/nRESET, 17 SWDCLK, 18 SWDIO, 19 ANT, 20 VSS, 21 DEC2, 22 DEC3, 23 XC1, 24 XC2, 25 VDD, 26 P0.25, 27 P0.28/AIN4, 28 P0.30/AIN6, 29 VSS, 30 DEC4, 31 DCC, 32 VDD, 33 EP
text: nRF52810

## PIC16F886-E/SS
designator U?
IC MCU 8BIT 14KB FLASH 28SSOP; Interface: I2C,SPI,UART,USART; Data Bus Width: 8b; Core Architecture: PIC; Operating Supply Voltage: 5V; RAM Size: 368B; Max Power Dissipation: 800mW; Number of Timers/Counters: 3; Frequency: 20MHz; Max Supply Voltage: 5.5V; Min Supply Voltage: 2V; Number of Programmable I/O: 24; Watchdog Timer: Yes; Access Time: 20us; Peripherals: POR,PWM,WDT; Item Type: IC; ComponentLink1Description: LCSC; Supplier: Digi-Key; Supplier Part Number: PIC16F886-E/SS-ND; RoHS: Yes; Category: Microcontrollers; Stock: 2605; Pricing: 1=2.86, 25=2.8248 (USD); Mounting Technology: Surface Mount; Case/Package: SSOP; Pins: 28; Min Operating Temperature: -40°C; Max Operating Temperature: 125°C; Package Quantity: 47; Packaging: Rail/Tube; Clock Frequency: 20MHz; Memory Format: FLASH; Memory Size: 14KB; Radiation Hardening: No; Lead Free: Lead Free; RoHS Compliant: Yes; ComponentLink2URL: https://datasheet.ciiva.com/1570/41291g-1570521.pdf?src-supplier=Digi-Key; ComponentLink2Description: https://datasheet.ciiva.com/1570/41291g-1570521.pdf?src-supplier=Digi-Key; ComponentLink3URL: https://datasheet.ciiva.com/16477/filehandler-aspxddocname-en027084-16477381.pdf?src-supplier=Future+Electronics; ComponentLink3Description: https://datasheet.ciiva.com/16477/filehandler-aspxddocname-en027084-16477381.pdf?src-supplier=Future+Electronics
footprint SSOP-28-208mil
pins: 1 RE3/~MCLR/VPP, 2 RA0/AN0/ULPWU/C12IN0-, 3 RA1/AN1/C12IN1-, 4 RA2/AN2/VREF-/CVREF/C2IN+, 5 RA3/AN3/VREF+/C1IN+, 6 RA4/T0CKI/C1OUT, 7 RA5/AN4~{/SS}/C2OUT, 8 VSS, 9 RA7/OSC1/CLKIN, 10 RA6/OSC2/CLKOUT, 11 RC0/T1OSO/T1CKI, 12 RC1/T1OSI/CCP2, 13 RC2/P1A/CCP1, 14 RC3/SCK/SCL, 15 RC4/SDI/SDA, 16 RC5/SDO, 17 RC6/TX/CK, 18 RC7/RX/DT, 19 VSS, 20 VDD, 21 RB0/AN12/INT, 22 RB1/AN10/P1C/C12IN3-, 23 RB2/AN8/P1B, 24 RB3/AN9/PGM/C12IN2-, 25 RB4/AN11/P1D, 26 RB5/AN13/~T1G, 27 RB6/ICSPCLK, 28 RB7/ICSPDAT

## PIC16F886-I/SO
designator U?
MCU 8-bit PIC RISC 14KB Flash 2.5V/3.3V/5V Automotive 28-Pin SOIC W Tube; Manufacturer: Microchip; Manufacturer Part Number: PIC16F886-I/SO; Item Type: Microcontroller; Supplier: Rs; Supplier Part Number: 399442; RoHS: Yes; Category: Microcontrollers; Stock: 140; Pricing: 5=2.704, 10=2.672, 25=2.604, 100=2.54 (GBP); ComponentLink1URL: https://datasheet.ciiva.com/4838/41291d-62823-4838416.pdf?src-supplier=Mouser; ComponentLink1Description: https://datasheet.ciiva.com/4838/41291d-62823-4838416.pdf?src-supplier=Mouser; ComponentLink2URL: https://datasheet.ciiva.com/26344/160446-da-01-en-pic-pic16f886-i-so-26344783.pdf?src-supplier=Conrad; ComponentLink2Description: https://datasheet.ciiva.com/26344/160446-da-01-en-pic-pic16f886-i-so-26344783.pdf?src-supplier=Conrad; ComponentLink3URL: https://datasheet.ciiva.com/16936/70046255-16936103.pdf?src-supplier=Allied+Electronics; ComponentLink3Description: https://datasheet.ciiva.com/16936/70046255-16936103.pdf?src-supplier=Allied+Electronics; ComponentLink4URL: https://datasheet.ciiva.com/14131/pic16f882-4-6-7-eng-tds-14131967.pdf?src-supplier=Distrelec; ComponentLink4Description: https://datasheet.ciiva.com/14131/pic16f882-4-6-7-eng-tds-14131967.pdf?src-supplier=Distrelec; ComponentLink5URL: https://datasheet.ciiva.com/6639/41291g-6639883.pdf?src-supplier=Digi-Key; ComponentLink5Description: https://datasheet.ciiva.com/6639/41291g-6639883.pdf?src-supplier=Digi-Key; ComponentLink6URL: https://datasheet.ciiva.com/16209/filehandler-aspxddocname-en027084-16209190.pdf?src-supplier=Future+Electronics; ComponentLink6Description: https://datasheet.ciiva.com/16209/filehandler-aspxddocname-en027084-16209190.pdf?src-supplier=Future+Electronics; LCSC Part Number: C40447
footprint SOP-28-300mil
pins: 1 RE3/~MCLR/VPP, 2 RA0/AN0/ULPWU/C12IN0-, 3 RA1/AN1/C12IN1-, 4 RA2/AN2/VREF-/CVREF/C2IN+, 5 RA3/AN3/VREF+/C1IN+, 6 RA4/T0CKI/C1OUT, 7 RA5/AN4/~SS/C2OUT, 8 VSS, 9 RA7/OSC1/CLKIN, 10 RA6/OSC2/CLKOUT, 11 RC0/T1OSO/T1CKI, 12 RC1/T1OSI/CCP2, 13 RC2/P1A/CCP1, 14 RC3/SCK/SCL, 15 RC4/SDI/SDA, 16 RC5/SDO, 17 RC6/TX/CK, 18 RC7/RX/DT, 19 VSS, 20 VDD, 21 RB0/AN12/INT, 22 RB1/AN10/P1C/C12IN3-, 23 RB2/AN8/P1B, 24 RB3/AN9/PGM/C12IN2-, 25 RB4/AN11/P1D, 26 RB5/AN13/~T1G, 27 RB6/ICSPCLK, 28 RB7/ICSPDAT

## PIC16F886-I/SS
designator U?
PIC PIC® 16F Microcontroller IC 8-Bit 20MHz 14KB (8K x 14) FLASH 28-SSOP; Manufacturer: Microchip; Manufacturer Part Number: PIC16F886-I/SS; Supplier: Rs; Supplier Part Number: 400390P; RoHS: Yes; Category: Microcontrollers; Stock: 1762; Pricing: 10=2.52, 25=2.454, 100=2.394 (GBP); ComponentLink1URL: https://datasheet.ciiva.com/29119/160448-da-01-en-pic-pic16f886-i-ss-29119398.pdf?src-supplier=Conrad; ComponentLink1Description: https://datasheet.ciiva.com/29119/160448-da-01-en-pic-pic16f886-i-ss-29119398.pdf?src-supplier=Conrad; ComponentLink2URL: https://datasheet.ciiva.com/3203/41291f-3203502.pdf?src-supplier=Avnet; ComponentLink2Description: https://datasheet.ciiva.com/3203/41291f-3203502.pdf?src-supplier=Avnet; LCSC Part Number: C38185; Item Type: IC
footprint SSOP-28-208mil
pins: 1 RE3/~MCLR/VPP, 2 RA0/AN0/ULPWU/C12IN0-, 3 RA1/AN1/C12IN1-, 4 RA2/AN2/VREF-/CVREF/C2IN+, 5 RA3/AN3/VREF+/C1IN+, 6 RA4/T0CKI/C1OUT, 7 RA5/AN4/~SS/C2OUT, 8 VSS, 9 RA7/OSC1/CLKIN, 10 RA6/OSC2/CLKOUT, 11 RC0/T1OSO/T1CKI, 12 RC1/T1OSI/CCP2, 13 RC2/P1A/CCP1, 14 RC3/SCK/SCL, 15 RC4/SDI/SDA, 16 RC5/SDO, 17 RC6/TX/CK, 18 RC7/RX/DT, 19 VSS, 20 VDD, 21 RB0/AN12/INT, 22 RB1/AN10/P1C/C12IN3-, 23 RB2/AN8/P1B, 24 RB3/AN9/PGM/C12IN2-, 25 RB4/AN11/P1D, 26 RB5/AN13/~T1G, 27 RB6/ICSPCLK, 28 RB7/ICSPDAT